# Altium schematic symbol library UCP.SchLib: 378 symbols (part 4 of 14)
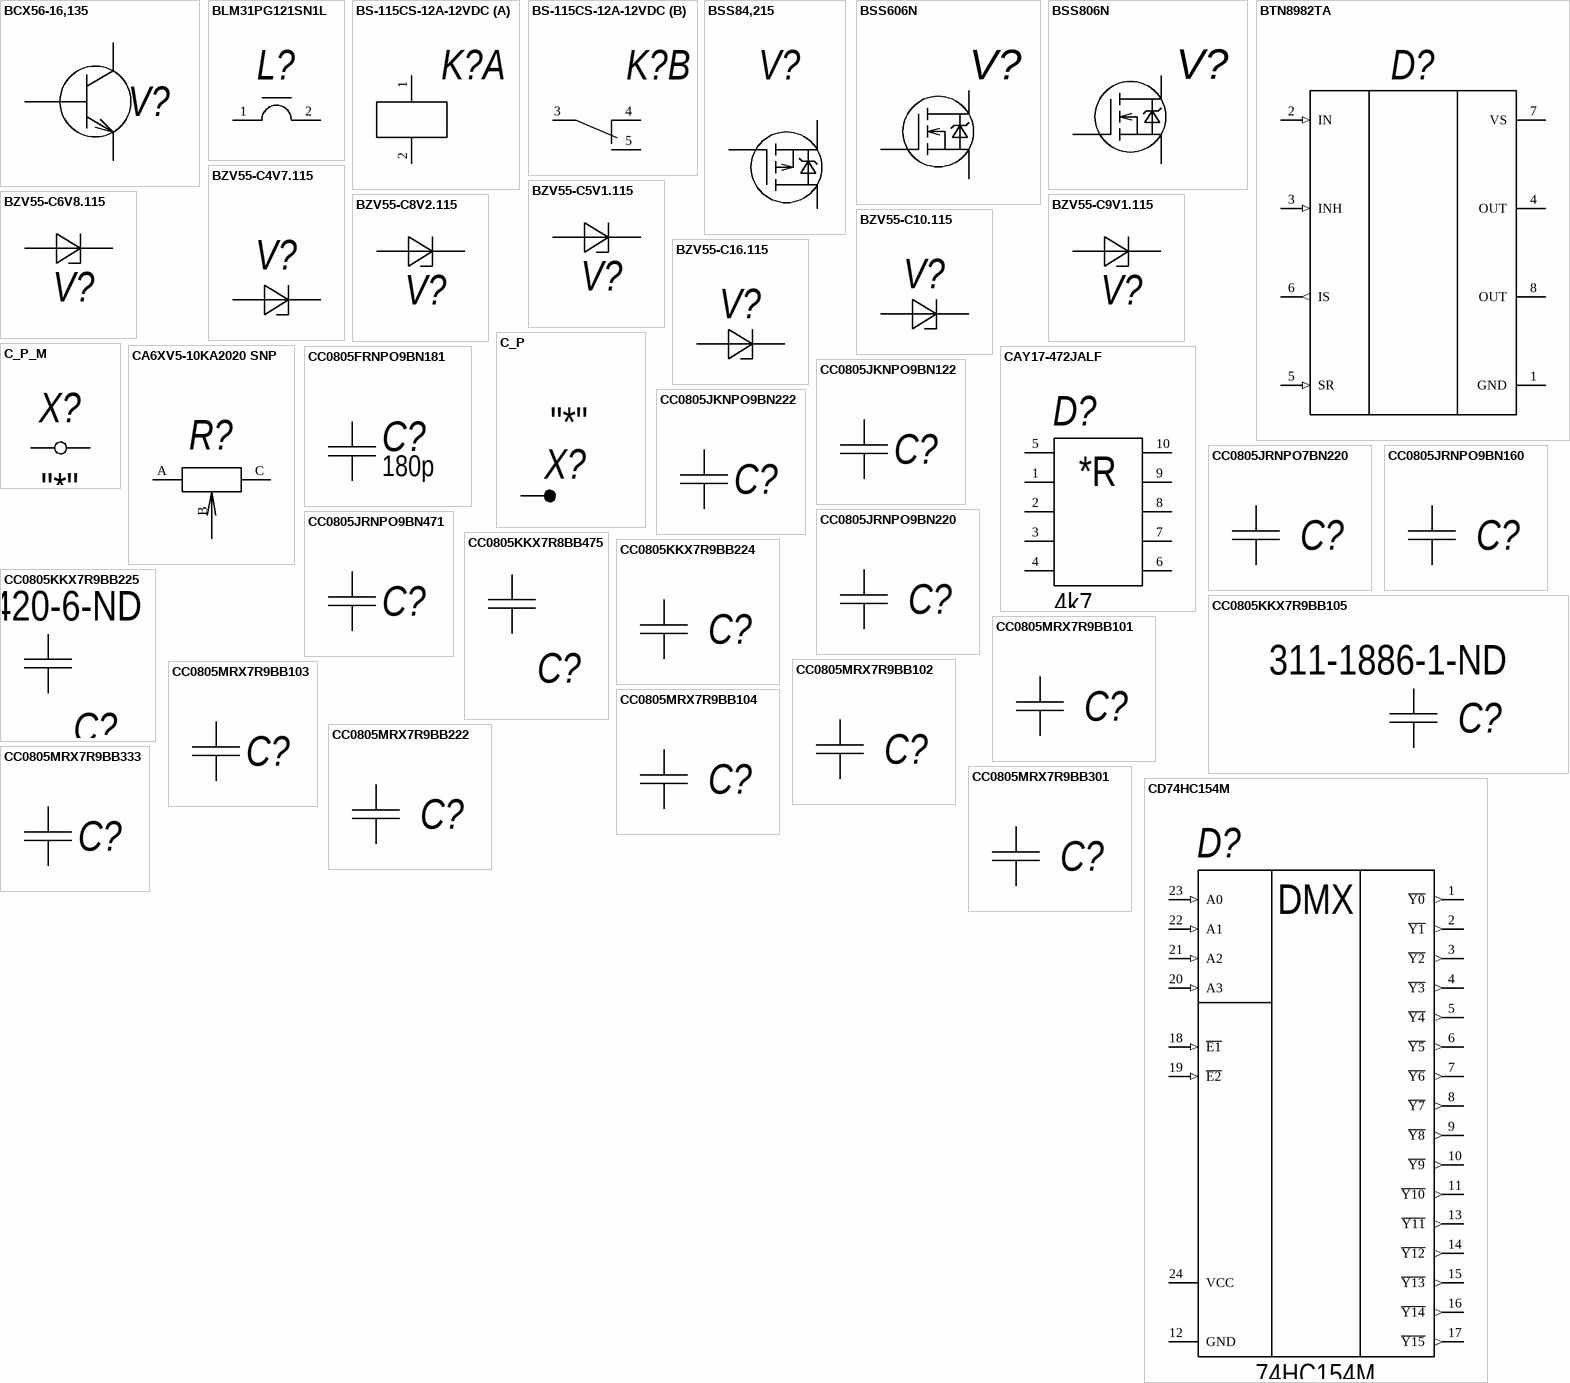
[diagram p27: symbols BCX56-16,135 to CD74HC154M]

## CC0805MRX7R9BB102
designator C?  (value not drawn)
Ceramic capacitor 0805 X7R 1nF 50V; Tolerance: 20%; Value: 1n; Type: Конденсатор; Supplier 1: Digi-Key; Supplier Part Number 1: 311-4349-1-ND; Supplier 2: Mouser; Manufacturer 2: Yageo; Manufacturer Part Number 2: CC0805MRX7R9BB102; RoHS: Yes; Category: Ceramic Capacitors; Stock 2: 5617; Pricing 2: 1=0,14000, 10=0,08800, 50=0,08800, 100=0,03900, 1000=0,02500, 10000=0,02100 (USD); Mount: SMT; Case/Package: 0805; Min Operating Temperature: -55°C; Max Operating Temperature: 125°C; Packaging: Tape and Reel; Capacitance: 1nF; Voltage Rating (DC): 50V; Dielectric: X7R; Resistor Type: Ceramic; Voltage Rating: 50V; Series: CC; Length: 0.079inch; Width: 0.049inch; Thickness: 0.028inch; Depth: 1.25mm; Lead Free: Lead Free; Halogen Free: Halogen Free; RoHS Compliant: Yes; ComponentLink1URL: http://www.mouser.com/ds/2/447/Yageo_UPY-GP_NP0_16V-to-50V_9-358835.pdf?src-supplier=Mouser; ComponentLink1Description: http://www.mouser.com/ds/2/447/Yageo_UPY-GP_NP0_16V-to-50V_9-358835.pdf?src-supplier=Mouser; ComponentLink2URL: http://components.arrow.com/part/dataview/0323_04166629?src-supplier=Arrow+Europe; ComponentLink2Description: http://components.arrow.com/part/dataview/0323_04166629?src-supplier=Arrow+Europe; ComponentLink3URL: http://www.yageo.com/documents/recent/UPY-GPHC_X7R_6.3V-to-50V_18.pdf?src-supplier=Digi-Key; ComponentLink3Description: http://www.yageo.com/documents/recent/UPY-GPHC_X7R_6.3V-to-50V_18.pdf?src-supplier=Digi-Key; Case Code (Imperial): 0805; Case Code (Metric): 2012; Voltage: 50V; Supplier Part Number 2: 603-CC805MRX7R9BB102
footprint CAPC200X125X95L50N (Capacitor, Chip; 2.00 mm L X 1.25 mm W X 0.95 mm H body)
pins: 1, 2

## CC0805MRX7R9BB103
designator C?  (value not drawn)
Ceramic capacitor 0805 X7R 10nF 50V; Manufacturer 1: Yageo; Tolerance: 20%; Description 2: Surface Mount Ceramic Multilayer Capacitor 0.033uF 20% X7R 50V 0805 Paper T/R; Value: 10n; Type: Конденсатор; Supplier 1: Digi-Key; Manufacturer Part Number 1: CC0805MRX7R9BB103; RoHS: Yes; Category: Ceramic Capacitors; Stock 1: 8655; Pricing 1: 1=0,10000, 10=0,07000, 50=0,03800, 100=0,03100, 500=0,02214, 1000=0,01739 (USD); Mount: SMT; Case/Package: 0805; Case Code (Imperial): 0805; Case Code (Metric): 2012; Weight: 0.000194oz; Min Operating Temperature: -55°C; Max Operating Temperature: 125°C; Voltage Rating: 50V; Packaging: Tape and Reel; Capacitance: 10nF; Voltage Rating (DC): 50V; Dielectric: X7R; Termination: SMD/SMT; Resistor Type: Ceramic; Series: CC; Length: 0.079inch; Width: 0.049inch; Thickness: 0.028inch; Depth: 1.25mm; Lead Free: Lead Free; Halogen Free: Halogen Free; RoHS Compliant: Yes; ComponentLink1URL: https://datasheet.ciiva.com/13264/upy-gphc-x7r-6-3v-to-50v-8-12304-13264316.pdf?src-supplier=Mouser; ComponentLink1Description: https://datasheet.ciiva.com/13264/upy-gphc-x7r-6-3v-to-50v-8-12304-13264316.pdf?src-supplier=Mouser; Supplier Part Number 1: 311-4350-1-ND; Supplier 2: Digi-Key; Supplier Part Number 2: 13-CC0805MRX7R9BB333TR-ND; Manufacturer 2: Yageo; Manufacturer Part Number 2: CC0805MRX7R9BB333; Pricing 2: 20000=0,02109 (USD); Voltage: 50V
footprint CAPC200X125X95L50N (Capacitor, Chip; 2.00 mm L X 1.25 mm W X 0.95 mm H body)
pins: 1, 2

## CC0805MRX7R9BB104
designator C?  (value not drawn)
Ceramic capacitor 0805 X7R 0.1µF 50V; Manufacturer 1: Yageo; Tolerance: 20%; Capacitance: 100nF; Value: 0.1u; Type: Конденсатор; Supplier 1: Digi-Key; Supplier Part Number 1: 311-4351-1-ND; Manufacturer Part Number 1: CC0805MRX7R9BB104; RoHS: Yes; Category: Ceramic Capacitors; Stock 1: 29978; Pricing 1: 1=0,15000, 10=0,10700, 50=0,06080, 100=0,05040, 500=0,03536, 1000=0,02927 (USD); Mount: SMT; Case/Package: 0805; Min Operating Temperature: -55°C; Max Operating Temperature: 125°C; Packaging: Tape and Reel; Dielectric: X7R; Voltage Rating: 50V; Voltage Rating (DC): 50V; Series: CC; Length: 0.079inch; Width: 0.049inch; Thickness: 0.037inch; Depth: 1.25mm; Lead Free: Lead Free; Halogen Free: Halogen Free; RoHS Compliant: Yes; ComponentLink1URL: https://datasheet.ciiva.com/13207/upy-gphc-x7r-6-3v-to-50v-8-12304-13207535.pdf?src-supplier=Mouser; ComponentLink1Description: https://datasheet.ciiva.com/13207/upy-gphc-x7r-6-3v-to-50v-8-12304-13207535.pdf?src-supplier=Mouser; Case Code (Imperial): 0805; Case Code (Metric): 2012; Voltage: 50V
footprint CAPC200X125X95L50N (Capacitor, Chip; 2.00 mm L X 1.25 mm W X 0.95 mm H body)
pins: 1, 2

## CC0805MRX7R9BB222
designator C?  (value not drawn)
0805 2.2 nF 50 V ±20 % Tolerance X7R SMT Multilayer Ceramic Capacitor; Capacitance: 1nF; Tolerance: 20%; Voltage Rating (DC): 50V; Value: 2.2n; Type: Конденсатор; Supplier 1: Digi-Key; Supplier Part Number 1: 311-4349-1-ND; Supplier 2: Mouser; Manufacturer 2: Yageo; Manufacturer Part Number 2: CC0805MRX7R9BB102; RoHS: Yes; Category: Ceramic Capacitors; Stock 2: 5617; Pricing 2: 1=0,14000, 10=0,08800, 50=0,08800, 100=0,03900, 1000=0,02500, 10000=0,02100 (USD); Mount: SMT; Case/Package: 0805; Min Operating Temperature: -55°C; Max Operating Temperature: 125°C; Packaging: Tape and Reel; Dielectric: X7R; Resistor Type: Ceramic; Voltage Rating: 50V; Series: CC; Length: 0.079inch; Width: 0.049inch; Thickness: 0.028inch; Depth: 1.25mm; Lead Free: Lead Free; Halogen Free: Halogen Free; RoHS Compliant: Yes; ComponentLink1URL: http://www.mouser.com/ds/2/447/Yageo_UPY-GP_NP0_16V-to-50V_9-358835.pdf?src-supplier=Mouser; ComponentLink1Description: http://www.mouser.com/ds/2/447/Yageo_UPY-GP_NP0_16V-to-50V_9-358835.pdf?src-supplier=Mouser; ComponentLink2URL: http://components.arrow.com/part/dataview/0323_04166629?src-supplier=Arrow+Europe; ComponentLink2Description: http://components.arrow.com/part/dataview/0323_04166629?src-supplier=Arrow+Europe; ComponentLink3URL: http://www.yageo.com/documents/recent/UPY-GPHC_X7R_6.3V-to-50V_18.pdf?src-supplier=Digi-Key; ComponentLink3Description: http://www.yageo.com/documents/recent/UPY-GPHC_X7R_6.3V-to-50V_18.pdf?src-supplier=Digi-Key; Case Code (Imperial): 0805; Case Code (Metric): 2012; Voltage: 50V; Supplier Part Number 2: 603-CC805MRX7R9BB102; Supplier 3: Avnet; Supplier Part Number 3: CC0805MRX7R9BB222; Manufacturer 3: Yageo; Manufacturer Part Number 3: CC0805MRX7R9BB222; RoHS 3: Yes; Pricing 3: 16000=0,00882 (USD)
footprint CAPC200X125X95L50N (Capacitor, Chip; 2.00 mm L X 1.25 mm W X 0.95 mm H body)
pins: 1, 2

## CC0805MRX7R9BB301
designator C?  (value not drawn)
Ceramic capacitor 0805 X7R 300pF 50V; Manufacturer 1: KEMET; Manufacturer Part Number 1: C0805C301J5GACTU; Capacitance: 1nF; Tolerance: 20%; Value: 300p; Type: Конденсатор; Dielectric: C0G; Dissipation Factor: 0.5%; Mount: SMT; Case/Package: 0805; Voltage Rating: 50V; Voltage: 50V; Supplier 1: Farnell; Supplier Part Number 1: 2819781; RoHS 1: Yes; Category: Ceramic Capacitors; Stock 1: 4548; Pricing 1: 10=0,152, 100=0,127, 500=0,0896, 1000=0,077, 2000=0,0727 (EUR); Case Code (Imperial): 0805; Case Code (Metric): 2012; Dielectric Material: Ceramic; Min Operating Temperature: -55°C; Max Operating Temperature: 125°C; Voltage Rating (DC): 50V; Packaging: Tape and Reel; Package Quantity: 1; Termination: SMD/SMT; Series: C; Length: 2mm; Width: 0.049inch; Height: 0.78mm; Depth: 1.25mm; Thickness: 0.035inch; Lead Pitch: 0.75mm; RoHS Compliant: Yes; Lead Free: Lead Free; Reach SVHC Compliant: No; ComponentLink1URL: http://www.mouser.com/ds/2/212/KEM_C1003_C0G_SMD-1101588.pdf?src-supplier=Mouser; ComponentLink1Description: http://www.mouser.com/ds/2/212/KEM_C1003_C0G_SMD-1101588.pdf?src-supplier=Mouser; ComponentLink2URL: http://components.arrow.com/part/dataview/2091991S5917792N7429?src-supplier=Arrow+Electronics; ComponentLink2Description: http://components.arrow.com/part/dataview/2091991S5917792N7429?src-supplier=Arrow+Electronics; ComponentLink3URL: https://search.kemet.com/component-edge/download/datasheet/C0805C301J5GACTU.pdf?src-supplier=Digi-Key; ComponentLink3Description: https://search.kemet.com/component-edge/download/datasheet/C0805C301J5GACTU.pdf?src-supplier=Digi-Key; ComponentLink4URL: https://api.kemet.com/component-edge/download/datasheet/C0805C301J5GACTU.pdf?src-supplier=Digi-Key; ComponentLink4Description: https://api.kemet.com/component-edge/download/datasheet/C0805C301J5GACTU.pdf?src-supplier=Digi-Key
footprint CAPC200X125X95L50N (Capacitor, Chip; 2.00 mm L X 1.25 mm W X 0.95 mm H body)
pins: 1, 2

## CC0805MRX7R9BB333
designator C?  (value not drawn)
Ceramic capacitor 0805 X7R 33nF 50V; Manufacturer 1: Yageo; Description 1: Surface Mount Ceramic Multilayer Capacitor 0.033uF 20% X7R 50V 0805 Paper T/R; Value: 33n; Type: Конденсатор; ComponentLink1URL: https://datasheet.ciiva.com/13264/upy-gphc-x7r-6-3v-to-50v-8-12304-13264316.pdf?src-supplier=Mouser; ComponentLink1Description: https://datasheet.ciiva.com/13264/upy-gphc-x7r-6-3v-to-50v-8-12304-13264316.pdf?src-supplier=Mouser; Supplier 1: Digi-Key; Supplier Part Number 1: 13-CC0805MRX7R9BB333TR-ND; Manufacturer Part Number 1: CC0805MRX7R9BB333; RoHS: Yes; Category: Ceramic Capacitors; Pricing 1: 20000=0,02109 (USD); RoHS Compliant: Yes; Capacitance: 33nF; Case/Package: 0805; Case Code (Imperial): 0805; Case Code (Metric): 2012; Dielectric: X7R; Voltage Rating (DC): 50V; Voltage Rating: 50V; Voltage: 50V; Mount: SMT
footprint CAPC200X125X95L50N (Capacitor, Chip; 2.00 mm L X 1.25 mm W X 0.95 mm H body)
pins: 1, 2

## CD74HC154M
designator D?  value 74HC154M  (hidden comment: CD74HC154M)
High-Speed CMOS Logic 4- to 16-Line Decoder/Demultiplexer; Type: Микросхема; Case/Package: SOIC-16; Mount: SMT; ComponentLink1URL: https://datasheet.ciiva.com/22696/1831198-22696812.pdf?src-supplier=Element14; ComponentLink1Description: https://datasheet.ciiva.com/22696/1831198-22696812.pdf?src-supplier=Element14; ComponentLink2URL: https://datasheet.ciiva.com/34301/916385-34301758.pdf?src-supplier=Jameco; ComponentLink2Description: https://datasheet.ciiva.com/34301/916385-34301758.pdf?src-supplier=Jameco; ComponentLink3URL: https://datasheet.ciiva.com/15093/getdatasheetpartid-134875-15093436.pdf?src-supplier=Verical; ComponentLink3Description: https://datasheet.ciiva.com/15093/getdatasheetpartid-134875-15093436.pdf?src-supplier=Verical; ComponentLink4URL: https://datasheet.ciiva.com/1509/1831198-1509483.pdf?src-supplier=Element14; ComponentLink4Description: https://datasheet.ciiva.com/1509/1831198-1509483.pdf?src-supplier=Element14; ComponentLink5URL: https://datasheet.ciiva.com/46381/1886142-46381835.pdf?src-supplier=Element14; ComponentLink5Description: https://datasheet.ciiva.com/46381/1886142-46381835.pdf?src-supplier=Element14; ComponentLink6URL: https://datasheet.ciiva.com/46435/1831198-46435871.pdf?src-supplier=Element14; ComponentLink6Description: https://datasheet.ciiva.com/46435/1831198-46435871.pdf?src-supplier=Element14; ComponentLink7URL: https://datasheet.ciiva.com/1886/sn74hc595-1886280.pdf?src-supplier=Digi-Key; ComponentLink7Description: https://datasheet.ciiva.com/1886/sn74hc595-1886280.pdf?src-supplier=Digi-Key; ComponentLink8URL: https://datasheet.ciiva.com/1886/sn74hc595-1886279.pdf?src-supplier=Digi-Key; ComponentLink8Description: https://datasheet.ciiva.com/1886/sn74hc595-1886279.pdf?src-supplier=Digi-Key; ComponentLink9URL: https://datasheet.ciiva.com/1886/sn74hc595-1886281.pdf?src-supplier=Digi-Key; ComponentLink9Description: https://datasheet.ciiva.com/1886/sn74hc595-1886281.pdf?src-supplier=Digi-Key; ComponentLink10URL: https://datasheet.ciiva.com/14294/sn74hc595-14294991.pdf?src-supplier=Avnet; ComponentLink10Description: https://datasheet.ciiva.com/14294/sn74hc595-14294991.pdf?src-supplier=Avnet; ComponentLink11URL: https://datasheet.ciiva.com/14294/sn74hc595-14294989.pdf?src-supplier=Avnet; ComponentLink11Description: https://datasheet.ciiva.com/14294/sn74hc595-14294989.pdf?src-supplier=Avnet; Supplier 1: Heisener; Supplier Part Number 1: CD74HC154M
footprint SOIC24P127_1540X1032X265L75X42 (SOIC, 24-Leads, Body 15,40x7,50mm, Pitch 1,27mm, IPC Medium Density)
pins: 1 ~{Y0} (out) "GND", 2 ~{Y1} (out) "GND", 3 ~{Y2} (out) "GND", 4 ~{Y3} (out) "GND", 5 ~{Y4} (out) "GND", 6 ~{Y5} (out) "GND", 7 ~{Y6} (out) "GND", 8 ~{Y7} (out) "GND", 9 ~{Y8} (out) "GND", 10 ~{Y9} (out) "GND", 11 ~{Y10} (out) "GND", 12 GND (power), 13 ~{Y11} (out) "GND", 14 ~{Y12} (out) "GND", 15 ~{Y13} (out) "GND", 16 ~{Y14} (out) "GND", 17 ~{Y15} (out) "GND", 18 ~{E1} (in) "GND", 19 ~{E2} (in) "GND", 20 A3 (in) "GND", 21 A2 (in) "GND", 22 A1 (in) "GND", 23 A0 (in) "GND", 24 VCC (power) "Vcc"
1 alternate drawing of the same symbol
text: DMX

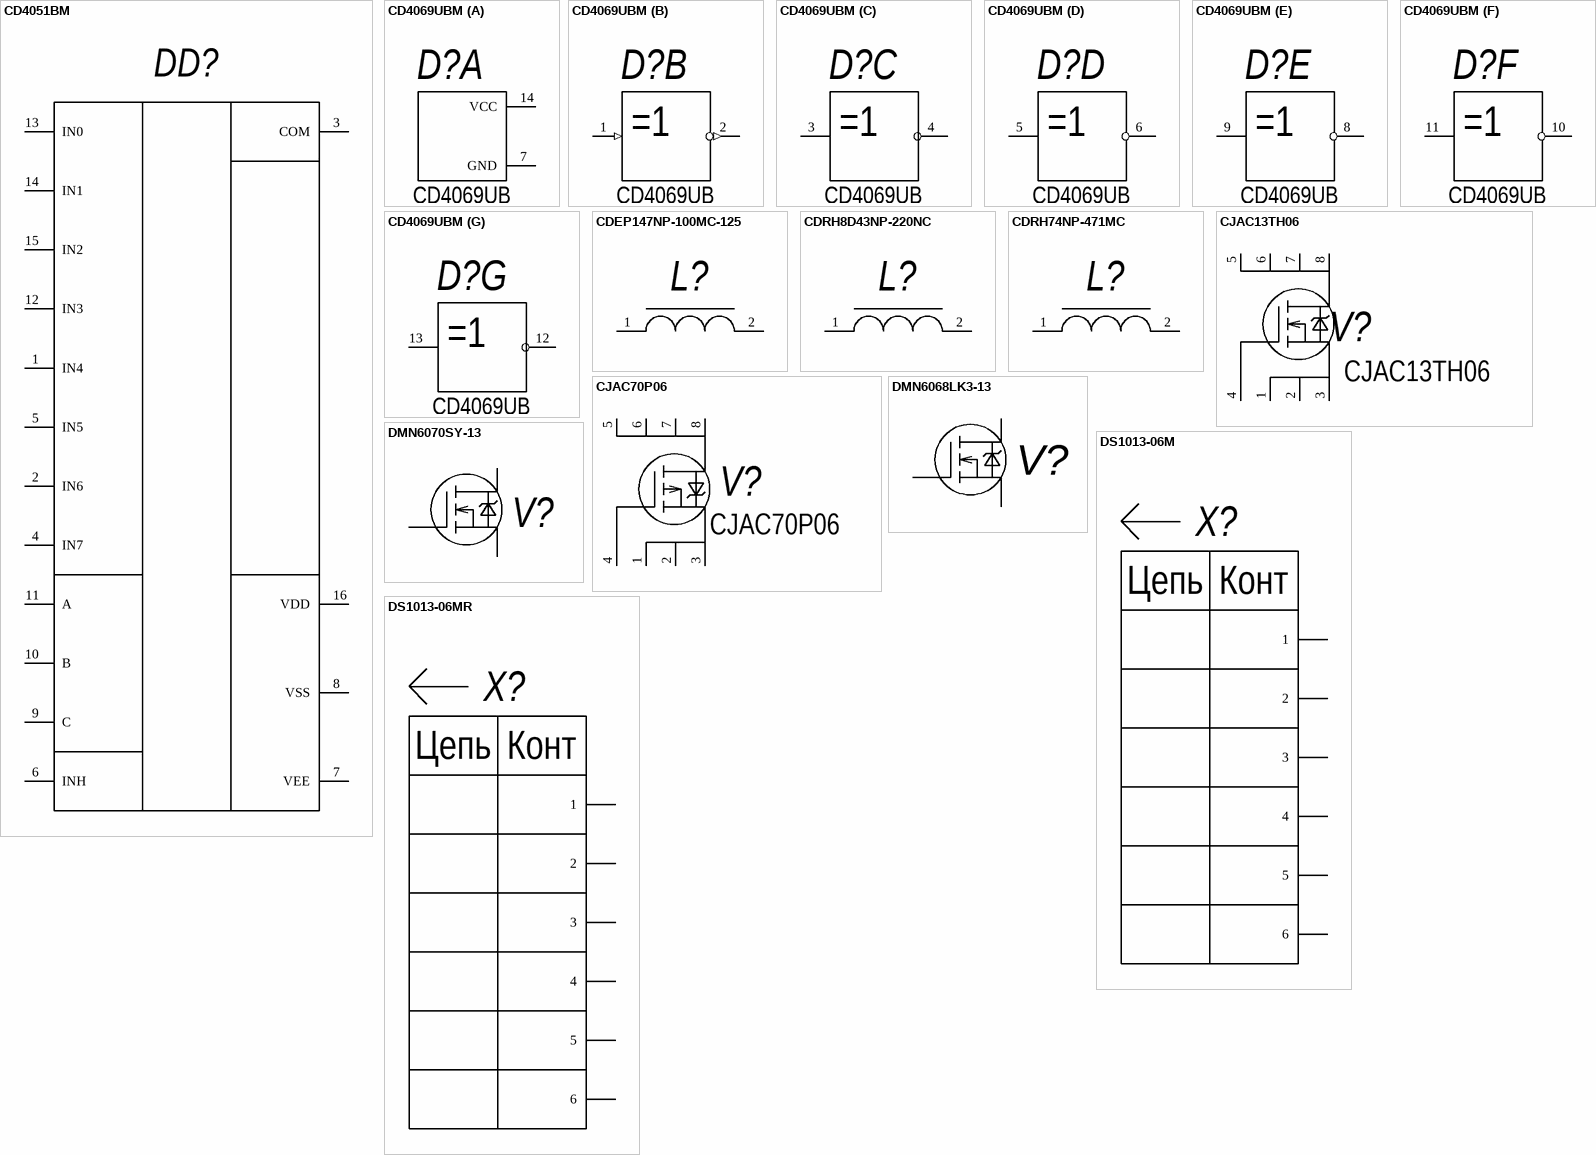
[diagram p7: symbols CD4051BM to DS1013-06MR]

## CD4051BM
designator DD?, comment CD4051BM96  (value not drawn)
CMOS Single 8-Channel Analog Multiplexer/Demultiplexer / With Logic-Level Conversion; Value: 4051; Supplier 1: Arrow Electronics; Supplier Part Number 1: CD4051BM96; Case/Package: SOIC-16; Mount: SMT; Type: Микросхема
footprint SOIC16P127_990X600X175L83X42N (Small Outline IC (SOIC), 1.27 mm pitch; 16 pin, 9.90 mm L X 3.90 mm W X 1.75 mm H body)
pins: 1 IN4, 2 IN6, 3 COM, 4 IN7, 5 IN5, 6 INH, 7 VEE (power), 8 VSS (power), 9 C, 10 B, 11 A, 12 IN3, 13 IN0, 14 IN1, 15 IN2, 16 VDD (power)

## CD4069UBM
designator D?  value CD4069UB  (hidden comment: CD4069UBM)
IC HEX INVERTER 14SOIC; Manufacturer 1: Texas Instruments; Manufacturer Part Number 1: CD4069UBM96; Type: Микросхема; Number of Inputs: 1; Propagation Delay: 110ns; Logic Function: Buffer,Inverter; Number of Elements: 6; Max Supply Voltage: 18V; Min Supply Voltage: 3V; Output Current: 6.8A; Quiescent Current: 5uA; High Level Output Current: -4.2mA; Low Level Output Current: 4.2mA; Operating Supply Voltage: 15V; Case/Package: SOIC-14; Mount: SMT; Max Operating Temperature: 125°C; ComponentLink1URL: https://datasheet.ciiva.com/15089/getdatasheetpartid-92506-15089215.pdf?src-supplier=Verical; ComponentLink1Description: https://datasheet.ciiva.com/15089/getdatasheetpartid-92506-15089215.pdf?src-supplier=Verical; ComponentLink2URL: https://datasheet.ciiva.com/41677/1845236-41677277.pdf?src-supplier=Newark; ComponentLink2Description: https://datasheet.ciiva.com/41677/1845236-41677277.pdf?src-supplier=Newark; ComponentLink3URL: https://datasheet.ciiva.com/1872/cd4069ub-1872740.pdf?src-supplier=Digi-Key; ComponentLink3Description: https://datasheet.ciiva.com/1872/cd4069ub-1872740.pdf?src-supplier=Digi-Key; ComponentLink4URL: https://datasheet.ciiva.com/1872/cd4069ub-1872739.pdf?src-supplier=Digi-Key; ComponentLink4Description: https://datasheet.ciiva.com/1872/cd4069ub-1872739.pdf?src-supplier=Digi-Key; ComponentLink5URL: https://datasheet.ciiva.com/1872/cd4069ub-1872741.pdf?src-supplier=Digi-Key; ComponentLink5Description: https://datasheet.ciiva.com/1872/cd4069ub-1872741.pdf?src-supplier=Digi-Key; Supplier 1: Farnell; Supplier Part Number 1: 3120133; RoHS 1: Yes; Category: Logic Gates; Pricing 1: 5=0,53000, 10=0,45400, 100=0,31500, 500=0,26600, 1000=0,18700 (EUR); Number of Pins: 14; Weight: 0.004564oz; Contact Plating: Gold; Min Operating Temperature: -55°C; Package Quantity: 1; Packaging: Tape and Reel; Number of Circuits: 6; Turn-On Delay Time: 110ns; Series: 4000B; Technology: CMOS; Number of Bits: 6; Number of Gates: 6; Radiation Hardening: No; Lead Free: Lead Free; RoHS Compliant: Yes; Reach SVHC Compliant: Yes
footprint SOIC14P127_865X600X175L83X42N (Small Outline IC (SOIC), 1.27 mm pitch; 14 pin, 8.65 mm L X 3.90 mm W X 1.75 mm H body)
footprint SOIC14P127_865X600X175L65X42N (Small Outline IC (SOIC), 1.27 mm pitch; 14 pin, 8.65 mm L X 3.90 mm W X 1.75 mm H body)
part A pins: 7 GND (power) "Ground (0 V)", 14 VCC (power) "Supply Voltage"
part B pins: 1 1A (in) "Data Input", 2 1B (out) "Data Output"
part C pins: 3 1Y "Data Output", 4 2A "Data Input"
part D pins: 5 2B "Data Input", 6 2Y "Data Output"
part E pins: 8 3Y "Data Output", 9 3A "Data Input"
part F pins: 10 3B "Data Input", 11 4Y "Data Output"
part G pins: 12 4A "Data Input", 13 4B "Data Input"

## CDEP147NP-100MC-125
designator L?  (value not drawn)
SMD Power Inductor 10uH ±20% 10A 13.31mOhm; Type: Катушка индуктивности; Value: CDRH74; Case/Package: SMD-2; Mount: SMT; Supplier 1: Avnet; Supplier Part Number 1: CDEP147NP-100MC-125
footprint SUMIDA_CDEP147
pins: 1 "Назначение вывода", 2 "Назначение вывода"

## CDRH8D43NP-220NC
designator L?  (value not drawn)
Shielded High Power Inductors / 100 uH, 1,5 A; Manufacturer 1: Sumida; Type: Катушка индуктивности; Value: CDRH8D43-220; Core Material: Ferrite; Current Rating: 1.8A; Saturation Current: 2.6A; Tolerance: 30%; Inductance: 22uH; DC Resistance (DCR): 75mR; Test Frequency: 100kHz; Case/Package: SMD-2; Mount: SMT; Supplier 1: Avnet; Supplier Part Number 1: CDRH8D43NP-220NC; Manufacturer Part Number 1: CDRH8D43NP-220NC; RoHS 1: Yes; Category: Fixed Inductors; Pricing 1: 500=0,52514, 1000=0,51491, 2000=0,50468, 3000=0,49445, 4000=0,48422, 5000=0,46376, 50000=0,37356 (USD); Weight: 0.031747oz; Min Operating Temperature: -40°C; Max Operating Temperature: 100°C; Package Quantity: 500; Shielding: Shielded; Packaging: Tape and Reel; Max DC Current: 1.8A; Termination: SMD/SMT; Series: CDRH8D43; Length: 0.315inch; Width: 0.315inch; Height: 4.5mm; Height - Seated (Max): 0.177inch; Depth: 8.3mm; Radiation Hardening: No; RoHS Compliant: Yes; ComponentLink1URL: http://products.sumida.com/products/pdf/CDRH8D43.pdf?src-supplier=Digi-Key; ComponentLink1Description: http://products.sumida.com/products/pdf/CDRH8D43.pdf?src-supplier=Digi-Key; ComponentLink2URL: http://www.sumida.com/products/pdf/CDRH8D43.pdf?src-supplier=Avnet; ComponentLink2Description: http://www.sumida.com/products/pdf/CDRH8D43.pdf?src-supplier=Avnet; ComponentLink3URL: http://www.sumida.com/en/products/search_advanced_pi_list.php?txtPartNo=CDRH103RNP&amp;ProdType=CDRH103RNP&src-supplier=Mouser; ComponentLink3Description: http://www.sumida.com/en/products/search_advanced_pi_list.php?txtPartNo=CDRH103RNP&amp;ProdType=CDRH103RNP&src-supplier=Mouser
footprint SUMIDA_CDRH8D43
pins: 1 "Назначение вывода", 2 "Назначение вывода"

## CDRH74NP-471MC
designator L?  (value not drawn)
Shielded Inductors 470 uH, 260 mA, 3.01 Ohm; Type: Катушка индуктивности; Value: CDRH74; Case/Package: SMD-2; Mount: SMT; Supplier 1: Avnet; Supplier Part Number 1: CDRH74NP-471MC-B
footprint INDM730X730X450L90X180N (Inductor, Molded Body; 7.30 mm L X 7.30 mm W X 4.50 mm H body)
pins: 1 "Назначение вывода", 2 "Назначение вывода"

## CJAC13TH06
designator V?
N-Channel Power MOSFET,  60V, 2.2 mOhm, Surface Mount Enhancement Mode Mosfet - PDFNWB5×6-8L; Case/Package: PDFN5x6; Mount: SMT; Type: Транзистор; Value: CJAC13TH06
footprint JSCS_PDFNWB5x6-8L
pins: 1 S, 2 S, 3 S, 4 G, 5 D, 6 D, 7 D, 8 D

## CJAC70P06
designator V?
P-Channel Power MOSFET,  60V, 7.6 mOhm, Surface Mount Enhancement Mode Mosfet - PDFNWB5×6-8L; Case/Package: PDFN5x6; Mount: SMT; Type: Транзистор; Value: CJAC70P06
footprint JSCS_PDFNWB5x6-8L
pins: 1 S, 2 S, 3 S, 4 G, 5 D, 6 D, 7 D, 8 D

## DMN6068LK3-13
designator V?  (value not drawn)
N-Channel 60 V 68 mOhm Surface Mount Enhancement Mode Mosfet - TO252-3L; Manufacturer 1: Diodes Zetex; Rds On Max: 68mR; Input Capacitance: 502pF; Rise Time: 10.8ns; Max Power Dissipation: 2.12W; Drain to Source Voltage (Vdss): 60V; Continuous Drain Current (ID): 8.5A; Fall Time: 8.7ns; Turn-Off Delay Time: 11.9ns; Turn-On Delay Time: 3.6ns; Element Configuration: Single; Gate to Source Voltage (Vgs): 20V; Number of Elements: 1; Supplier 1: RSComponents; Manufacturer Part Number 1: DMN6068LK3-13; RoHS: Yes; Category: MOSFETs; Stock 1: 1; Pricing 1: 25=0,58100, 125=0,33000, 625=0,29400, 1250=0,25500 (USD); Mount: SMT; Case/Package: TO-252-3; Number of Pins: 3; Weight: 0.139332oz; Min Operating Temperature: -55°C; Max Operating Temperature: 150°C; Package Quantity: 2500; Packaging: Tape and Reel; Drain to Source Resistance: 68mR; Drain to Source Breakdown Voltage: 60V; Number of Channels: 1; Length: 6.73mm; Width: 6.22mm; Height: 2.39mm; Lead Free: Lead Free; REACH SVHC: No SVHC; ComponentLink1URL: https://datasheet.ciiva.com/6383/dmn6068lk3-6383152.pdf?src-supplier=Digi-Key; ComponentLink1Description: https://datasheet.ciiva.com/6383/dmn6068lk3-6383152.pdf?src-supplier=Digi-Key; ComponentLink2URL: https://datasheet.ciiva.com/4443/dmn6068lk3-60087-4443203.pdf?src-supplier=Mouser; ComponentLink2Description: https://datasheet.ciiva.com/4443/dmn6068lk3-60087-4443203.pdf?src-supplier=Mouser; ComponentLink3URL: https://datasheet.ciiva.com/8115/dmn6068lk3-8115608.pdf?src-supplier=Avnet; ComponentLink3Description: https://datasheet.ciiva.com/8115/dmn6068lk3-8115608.pdf?src-supplier=Avnet; ComponentLink4URL: https://datasheet.ciiva.com/6383/dmn6068lk3-6383149.pdf?src-supplier=Digi-Key; ComponentLink4Description: https://datasheet.ciiva.com/6383/dmn6068lk3-6383149.pdf?src-supplier=Digi-Key; Supplier Part Number 1: 7514200P; Type: Транзистор; Value: DMN6068
footprint DPAK4P229_990X238L159X76T520X546N (DPAK, 2.29 mm pitch; 2 pin, 6.095 mm L X 6.54 mm W X 2.38 mm H body)
pins: 1 G, 3 S, 4 D

## DMN6070SY-13
designator V?  (value not drawn)
N-Channel 60 V 85 mOhm 4.1A Surface Mount; Drain to Source Voltage (Vdss): 60V; Rds On Max: 85mR; Input Capacitance: 588pF; Max Power Dissipation: 2.1W; Supplier 1: Mouser; Supplier Part Number 1: 621-DMN6070SY-13; Supplier 2: Digi-Key; Manufacturer 2: Diodes; Manufacturer Part Number 2: DMN6070SY-13; RoHS: Yes; Category: MOSFETs; Pricing 2: 2500=0,14302 (USD); Mount: SMT; Case/Package: SOT-89; Min Operating Temperature: -55°C; Max Operating Temperature: 150°C; Packaging: Tape and Reel; Continuous Drain Current (ID): 4.1A; RoHS Compliant: Yes; ComponentLink1URL: https://www.diodes.com/assets/Datasheets/DMN6070SY.pdf?src-supplier=Digi-Key; ComponentLink1Description: https://www.diodes.com/assets/Datasheets/DMN6070SY.pdf?src-supplier=Digi-Key; Supplier Part Number 2: DMN6070SY-13-ND; Type: Транзистор; Value: DMN6070
footprint SOT89-150P350X160-3N (SOT89, 3-Leads, Body 4,50x2,50mm, Pitch 1,50mm, Lead Span 3,5mm , IPC Medium Density)
pins: 1 G, 2 D, 3 S

## DS1013-06M
designator X?  (value not drawn)
Case/Package: DIP-6; Mount: THT; Type: Вилка; Value: DS1013-06M
footprint HEADER_2x4
pins: 1, 2, 3, 4, 5, 6
text: Цепь; Конт

## DS1013-06MR
designator X?  (value not drawn)
Case/Package: DIP-6; Mount: THT; Type: Вилка; Value: DS1013-06MR
footprint DS1013-06RSIB-B-0
pins: 1, 2, 3, 4, 5, 6
text: Цепь; Конт

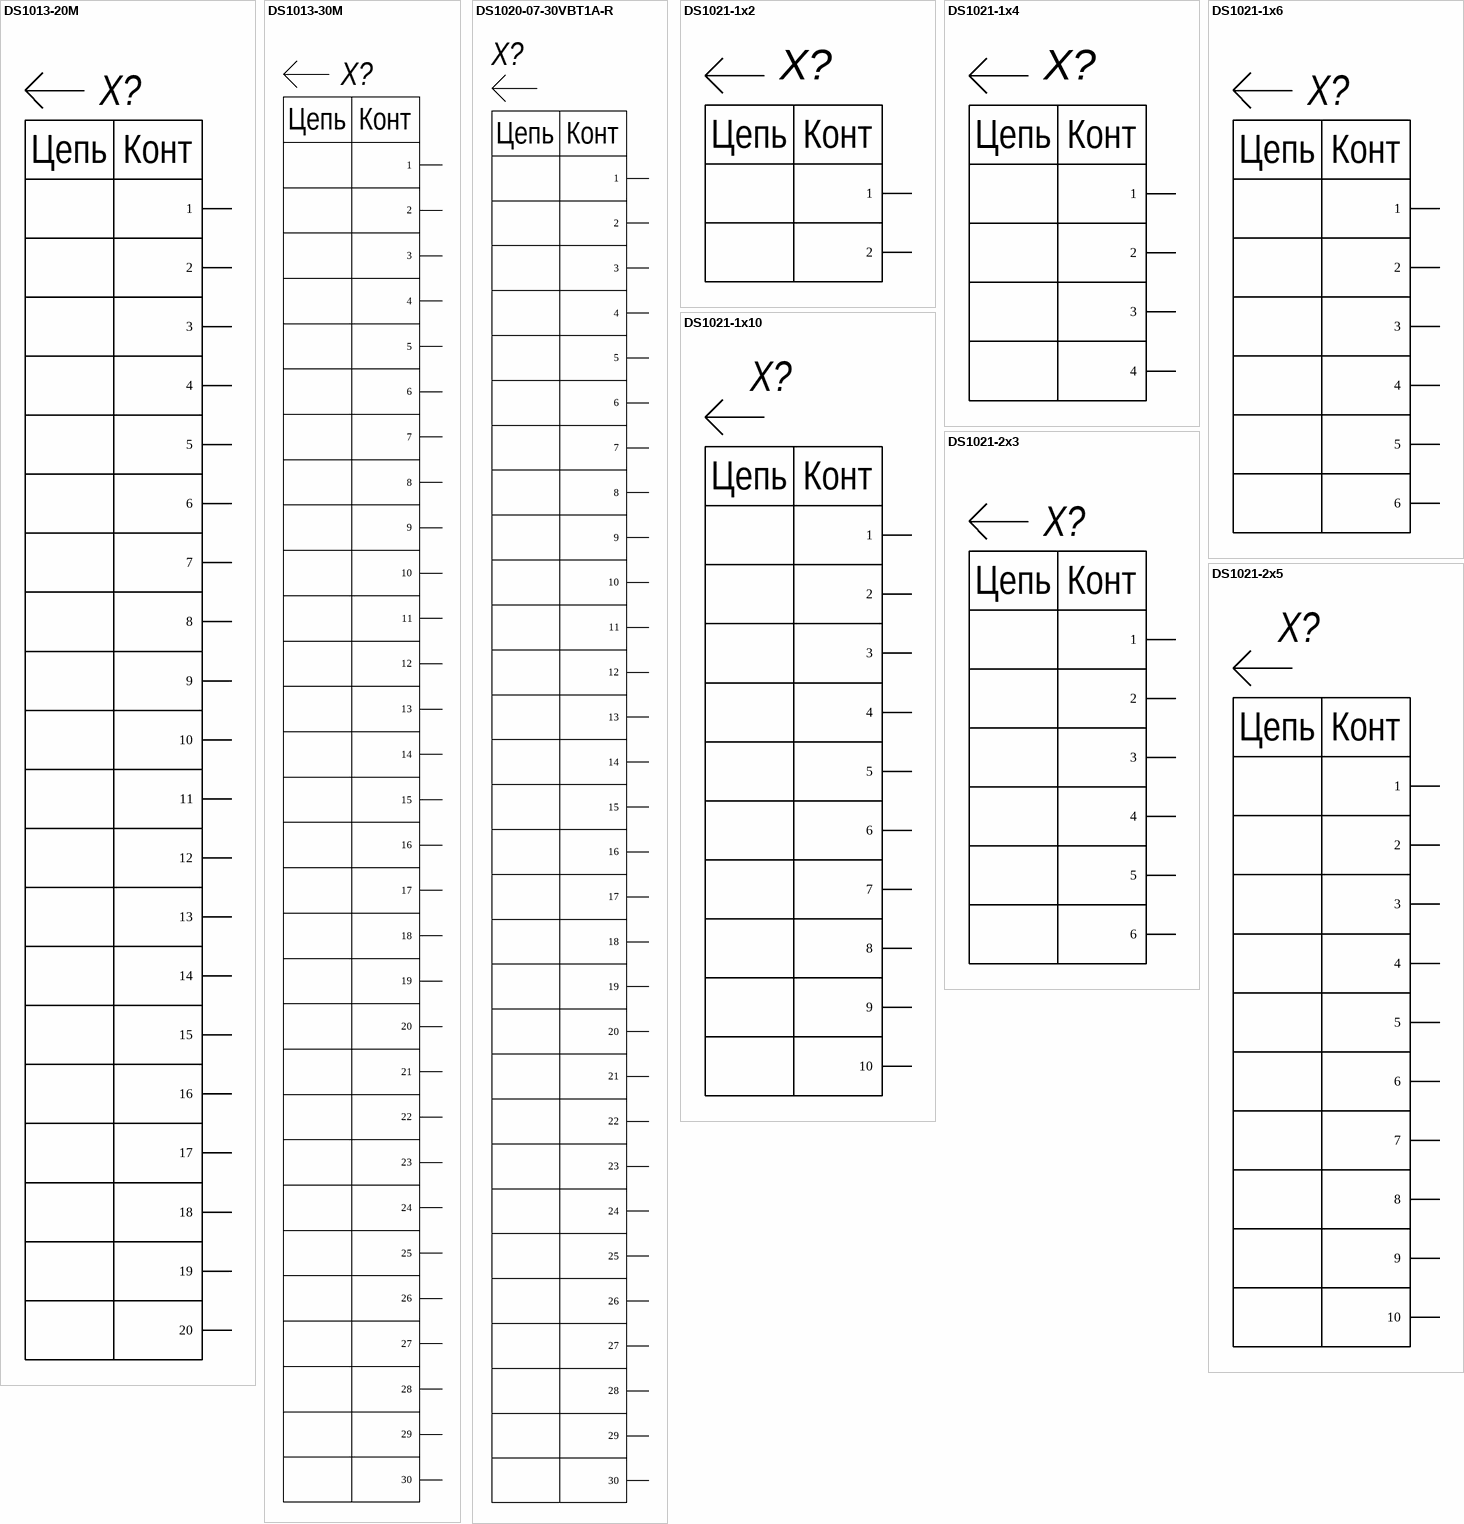
[diagram p8: symbols DS1013-20M to DS1021-2x5]

## DS1013-20M
designator X?  (value not drawn)
Case/Package: DIP-20; Mount: THT; Type: Вилка; Value: DS1013-20M
footprint IDC-20_SMT
pins: 1, 2, 3, 4, 5, 6, 7, 8, 9, 10, 11, 12, 13, 14, 15, 16, 17, 18, 19, 20
text: Цепь; Конт

## DS1013-30M
designator X?  (value not drawn)
Value: DS1013-20M; Case/Package: DIP-30; Mount: THT; Type: Вилка
footprint IDC-30_SMT
pins: 1, 2, 3, 4, 5, 6, 7, 8, 9, 10, 11, 12, 13, 14, 15, 16, 17, 18, 19, 20, 21, 22, 23, 24, 25, 26, 27, 28, 29, 30
text: Цепь; Конт

## DS1020-07-30VBT1A-R
designator X?, comment 522713079  (value not drawn)
Value: DS1020-30; Supplier 1: Digi-Key; Supplier Part Number 1: WM7967CT-ND; Case/Package: SMD-30; Mount: SMT; Type: Розетка
footprint DS1020-07-30VBT1A-R (1.00mm FPC ZIF R/A SMT Type 30 Pin)
pins: 1, 2, 3, 4, 5, 6, 7, 8, 9, 10, 11, 12, 13, 14, 15, 16, 17, 18, 19, 20, 21, 22, 23, 24, 25, 26, 27, 28, 29, 30
text: Цепь; Конт

## DS1021-1x2
designator X?, comment DS1021-1x2SF11  (value not drawn)
2,54 mm pin header single row  1x2; Case/Package: DIP-2; Mount: THT; Type: Вилка; Value: DS1021-1x2
footprint HDRV2W67P254_2x1_508x250H250 (Header, Vertical, 2.54 mm pitch; 0.64 mm lead width, 2 pins, 1 row, 2 pins per row, 5.08 mm L X 2.50 mm W X 8.60 mm H body)
pins: 1, 2
text: Цепь; Конт

## DS1021-1x4
designator X?, comment DS1021-1x4SF11  (value not drawn)
2,54 mm pin header single row  1x4; Case/Package: DIP-4; Mount: THT; Type: Вилка; Value: DS1021-1x4
footprint HDRV2W67P254_4x1_1016x250H250 (Header, Vertical, 2.54 mm pitch; 0.64 mm lead width, 4 pins, 1 row, 4 pins per row, 10.16 mm L X 2.50 mm W X 8.60 mm H body)
pins: 1, 2, 3, 4
text: Цепь; Конт

## DS1021-1x6
designator X?, comment DS1021-1x6SF11  (value not drawn)
2,54 mm pin header single row  1x6; Case/Package: DIP-6; Mount: THT; Type: Вилка; Value: DS1021-1x6
footprint HDRV6W64P254_6X1_1524X250H860 (Header, Vertical, 2.54 mm pitch; 0.64 mm lead width, 6 pins, 1 row, 6 pins per row, 15.24 mm L X 2.50 mm W X 8.60 mm H body)
pins: 1, 2, 3, 4, 5, 6
text: Цепь; Конт

## DS1021-1x10
designator X?, comment DS1021-1x10SF11  (value not drawn)
2,54 mm pin header single row  1x10; Case/Package: DIP-10; Mount: THT; Type: Вилка; Value: DS1021-1x10
footprint HDRV10W64P254_10X1_2540X250H860 (Header, Vertical, 2.54 mm pitch; 0.64 mm lead width, 6 pins, 1 row, 6 pins per row, 25.4 mm L X 2.50 mm W X 8.60 mm H body)
pins: 1, 2, 3, 4, 5, 6, 7, 8, 9, 10
text: Цепь; Конт

## DS1021-2x3
designator X?, comment DS1021-2x3SF11  (value not drawn)
2,54 mm pin header double row 2x3; Case/Package: DIP-6; Mount: THT; Type: Вилка; Value: DS1021-2x3
footprint HDRV6W64P254_3X2_762X500H860 (Header, Vertical, 2.54 mm pitch; 0.64 mm lead width, 6 pins, 2 rows, 3 pins per row, 7.62 mm L X 5.00 mm W X 8.60 mm H body)
footprint HDRV6W64P254_3X2_762X500H860 (REV) (Header, Vertical, 2.54 mm pitch; 0.64 mm lead width, 6 pins, 2 rows, 3 pins per row, 7.62 mm L X 5.00 mm W X 8.60 mm H body)
pins: 1, 2, 3, 4, 5, 6
text: Цепь; Конт

## DS1021-2x5
designator X?, comment DS1021-2x5SF11  (value not drawn)
2,54 mm pin header single row  2x5; Case/Package: DIP-10; Mount: THT; Type: Вилка; Value: DS1021-2x5
footprint HDRV10W64P254_5X2_1320X500H850 (Header, Vertical Receptacle, 2.54 mm pitch; 0.64 mm lead width, 10 pins, 2 row, 5 pins per row, 13.20 mm L X 5.00 mm W X 8.50 mm H body)
pins: 1, 2, 3, 4, 5, 6, 7, 8, 9, 10
text: Цепь; Конт

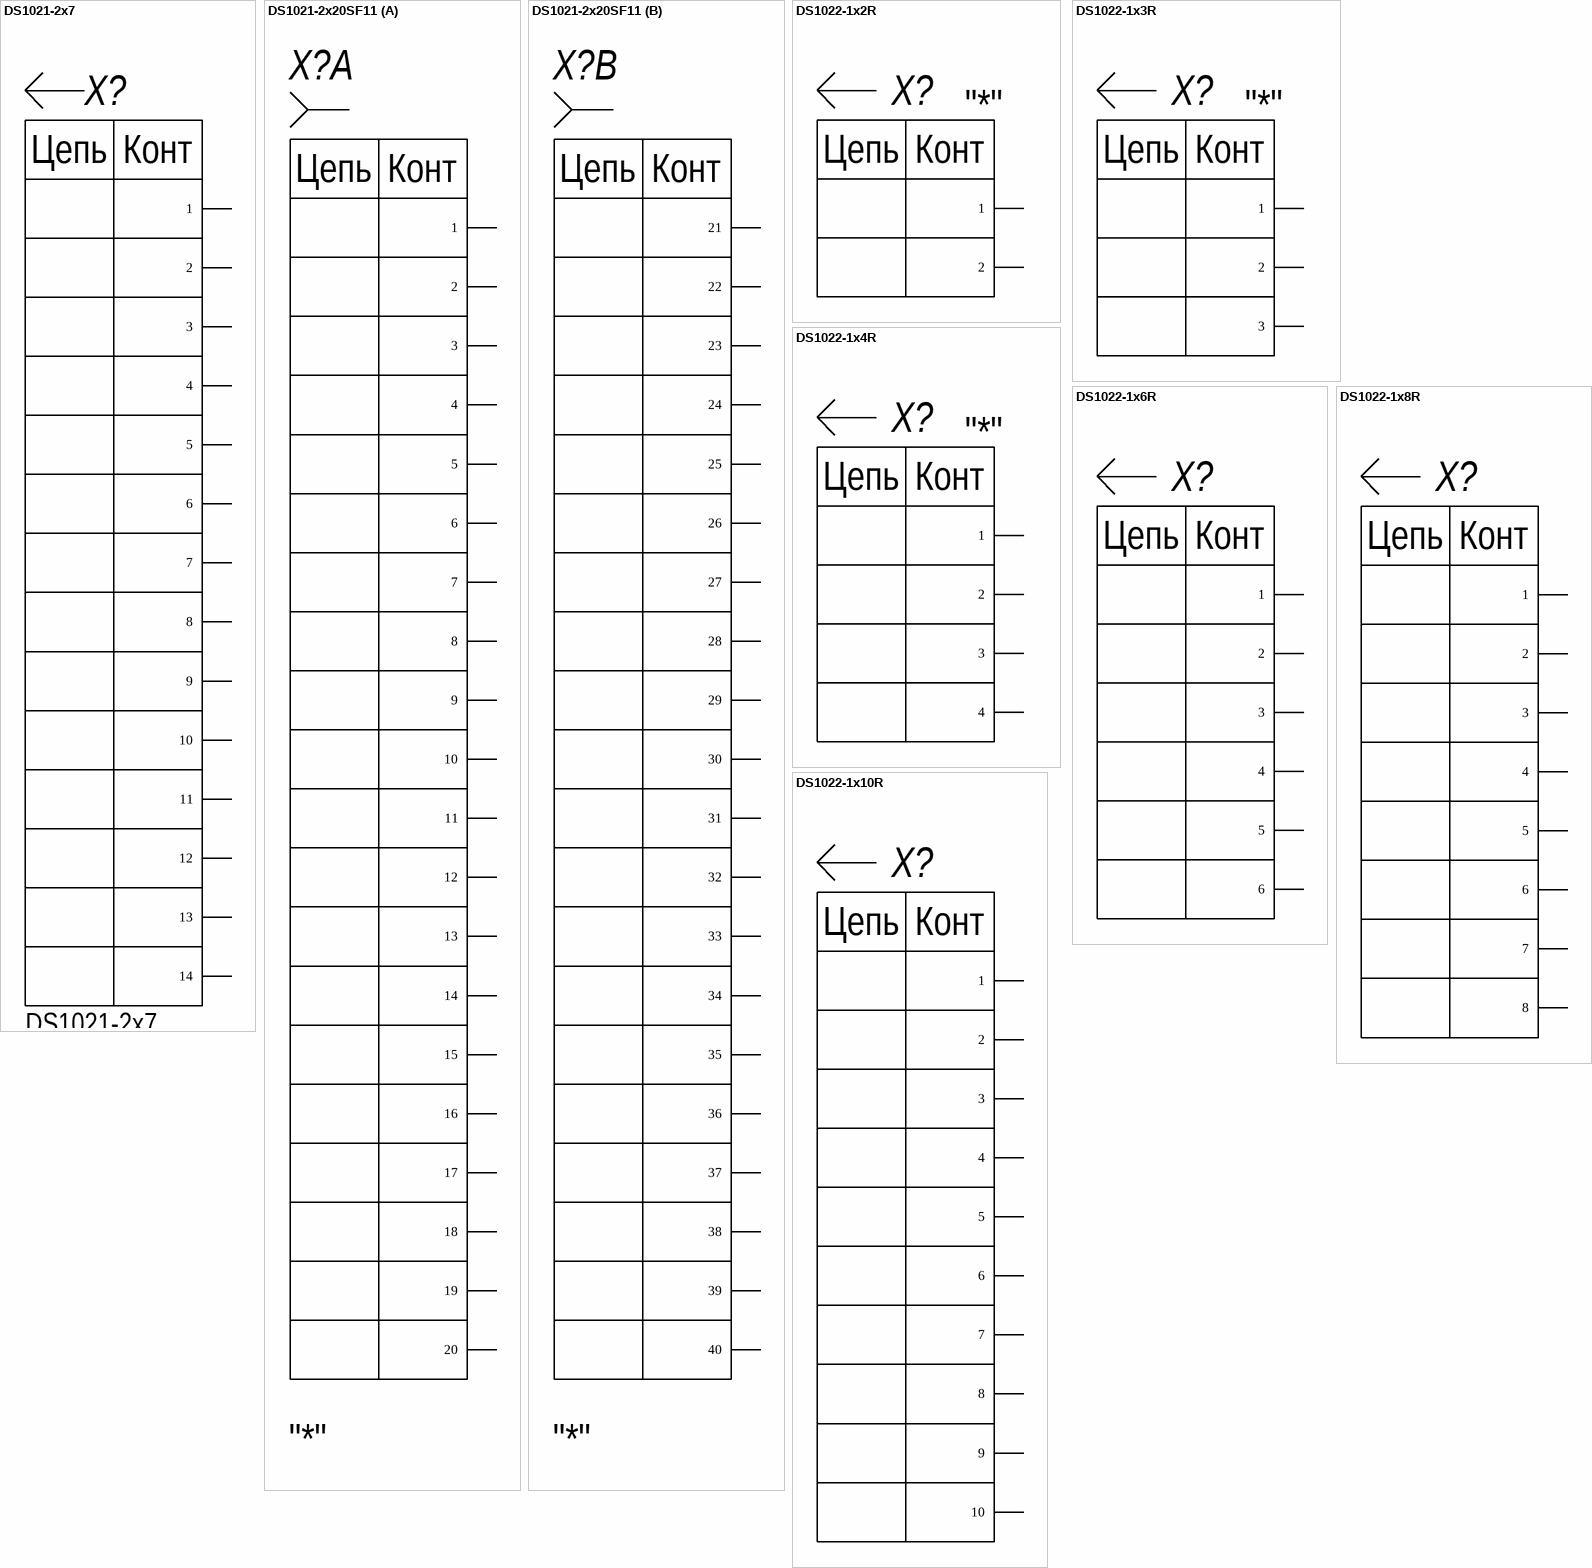
[diagram p9: symbols DS1021-2x7 to DS1022-1x10R]

## DS1021-2x7
designator X?, comment value DS1021-2x7  (hidden comment: DS1021-2x7SF11)
2,54 mm pin header single row  2x7; Case/Package: DIP-14; Mount: THT; Type: Вилка
footprint HDRV14W64P254_7X2_1774X500H850 (Header, Vertical Receptacle, 2.54 mm pitch; 0.64 mm lead width, 14 pins, 2 row, 7 pins per row, 17.74 mm L X 5.00 mm W X 8.50 mm H body)
pins: 1, 2, 3, 4, 5, 6, 7, 8, 9, 10, 11, 12, 13, 14
text: Цепь; Конт

## DS1021-2x20SF11
designator X?  Marck-2: "*"  (hidden comment: DS1021-2x20SF11)
2,54 Female Header 40 pin; Manufacturer 1: Ningbo Connfly Electric; Manufacturer Part Number 1: DS1023-1*40S21; ComponentLink1URL: https://datasheet.ciiva.com/30081/eng-cat-1307998-1-0705-074-30081833.pdf?src-supplier=Onlinecomponents.com; ComponentLink1Description: https://datasheet.ciiva.com/30081/eng-cat-1307998-1-0705-074-30081833.pdf?src-supplier=Onlinecomponents.com; RoHS: No; Pricing 1: 1=0,64000 (EUR); Marck-1: *; Case/Package: DIP-40; Mount: THT; Type: Вилка; Value: DS1021-2x20
footprint HDRV40W64P254_20X2_5130X500H850 (Header, Vertical Receptacle, 2.54 mm pitch; 0.64 mm lead width, 40 pins, 2 row, 20 pins per row, 51.30 mm L X 5.00 mm W X 8.50 mm H body)
part A pins: 1, 2, 3, 4, 5, 6, 7, 8, 9, 10, 11, 12, 13, 14, 15, 16, 17, 18, 19, 20
part B pins: 21, 22, 23, 24, 25, 26, 27, 28, 29, 30, 31, 32, 33, 34, 35, 36, 37, 38, 39, 40
part A text: Цепь; Конт
part B text: Цепь; Конт

## DS1022-1x2R
designator X?, comment Marck-2: "*"  (hidden comment: DS1022-1x3RU61)
2,54 mm pin header R/A type single row U type 1x2; Value: DS1022-1x2R; Marck-1: *; Case/Package: DIP-2; Mount: THT; Type: Вилка
footprint HDRRA6W67P254_2X1_508X250H250 (Header, Right Angle Post, 2.54 mm pitch; 0.67 mm lead width, 2 pins, 1 row, 2 pins per row, 5.08 mm L X 2.50 mm W X 2.50 mm H body)
footprint HDRRA6W67P254_2X1_508X250H250 (REV) (Header, Right Angle Post, 2.54 mm pitch; 0.67 mm lead width,2 pins, 1 row, 2 pins per row, 5.08 mm L X 2.50 mm W X 2.50 mm H body)
pins: 1, 2
text: Цепь; Конт

## DS1022-1x3R
designator X?, comment Marck-2: "*"  (hidden comment: DS1022-1x3RU61)
2,54 mm pin header R/A type single row U type 1x3; Marck-1: *; Case/Package: DIP-3; Mount: THT; Type: Вилка; Value: DS1022-1x3R
footprint HDRRA6W67P254_3X1_1524X250H250 (Header, Right Angle Post, 2.54 mm pitch; 0.67 mm lead width, 6 pins, 1 row, 6 pins per row, 7.62 mm L X 2.50 mm W X 2.50 mm H body)
footprint HDRRA6W67P254_3X1_1524X250H250 (REV) (Header, Right Angle Post, 2.54 mm pitch; 0.67 mm lead width, 6 pins, 1 row, 6 pins per row, 7.62 mm L X 2.50 mm W X 2.50 mm H body)
pins: 1, 2, 3
text: Цепь; Конт

## DS1022-1x4R
designator X?, comment Marck-2: "*"  (hidden comment: DS1022-1x4RU61)
2,54 mm pin header R/A type single row U type 1x4; Marck-1: *; Case/Package: DIP-4; Mount: THT; Type: Вилка; Value: DS1022-1x4R
footprint HDRRA6W67P254_4X1_1013X250H250 (Header, Right Angle Post, 2.54 mm pitch; 0.67 mm lead width, 4 pins, 1 row, 4 pins per row, 10.13 mm L X 2.50 mm W X 2.50 mm H body)
footprint HDRRA6W67P254_4X1_1013X250H250(REV) (Header, Right Angle Post, 2.54 mm pitch; 0.67 mm lead width, 4 pins, 1 row, 4 pins per row, 10.13 mm L X 2.50 mm W X 2.50 mm H body)
pins: 1, 2, 3, 4
text: Цепь; Конт

## DS1022-1x6R
designator X?, comment DS1022-1x6RU61  (value not drawn)
2,54 mm pin header R/A type single row U type 1x6; Marck-1: *; Marck-2: *; Case/Package: DIP-6; Mount: THT; Type: Вилка; Value: DS1022-1x6R
footprint HDRRA6W67P254_6X1_1524X250H250 (Header, Right Angle Post, 2.54 mm pitch; 0.67 mm lead width, 6 pins, 1 row, 6 pins per row, 15.24 mm L X 2.50 mm W X 2.50 mm H body)
footprint HDRRA6W67P254_6X1_1524X250H250(REV) (Header, Right Angle Post, 2.54 mm pitch; 0.67 mm lead width, 6 pins, 1 row, 6 pins per row, 15.24 mm L X 2.50 mm W X 2.50 mm H body)
pins: 1, 2, 3, 4, 5, 6
text: Цепь; Конт

## DS1022-1x8R
designator X?, comment DS1022-1x8RU61  (value not drawn)
2,54 mm pin header R/A type single row U type 1x8; Marck-1: *; Marck-2: *; Case/Package: DIP-8; Mount: THT; Type: Вилка; Value: DS1022-1x8R
footprint HDRRA8W67P254_8X1_2032X250H250(REV) (Header, Right Angle Post, 2.54 mm pitch; 0.67 mm lead width, 10 pins, 1 row, 10 pins per row, 20.32mm L X 2.50 mm W X 2.50 mm H body)
footprint HDRRA8W67P254_8X1_2032X250H250 (Header, Right Angle Post, 2.54 mm pitch; 0.67 mm lead width, 10 pins, 1 row, 10 pins per row, 20.32mm L X 2.50 mm W X 2.50 mm H body)
pins: 1, 2, 3, 4, 5, 6, 7, 8
text: Цепь; Конт

## DS1022-1x10R
designator X?, comment DS1022-1x10RU61  (value not drawn)
2,54 mm pin header R/A type single row U type 1x10; Marck-1: *; Marck-2: *; Case/Package: DIP-10; Mount: THT; Type: Вилка; Value: DS1022-1x10R
footprint HDRRA10W67P254_10X1_2540X250H250 (Header, Right Angle Post, 2.54 mm pitch; 0.67 mm lead width, 10 pins, 1 row, 10 pins per row, 25.4 mm L X 2.50 mm W X 2.50 mm H body)
footprint HDRRA10W67P254_10X1_2540X250H250 (REV) (Header, Right Angle Post, 2.54 mm pitch; 0.67 mm lead width, 10 pins, 1 row, 10 pins per row, 25.4 mm L X 2.50 mm W X 2.50 mm H body)
pins: 1, 2, 3, 4, 5, 6, 7, 8, 9, 10
text: Цепь; Конт

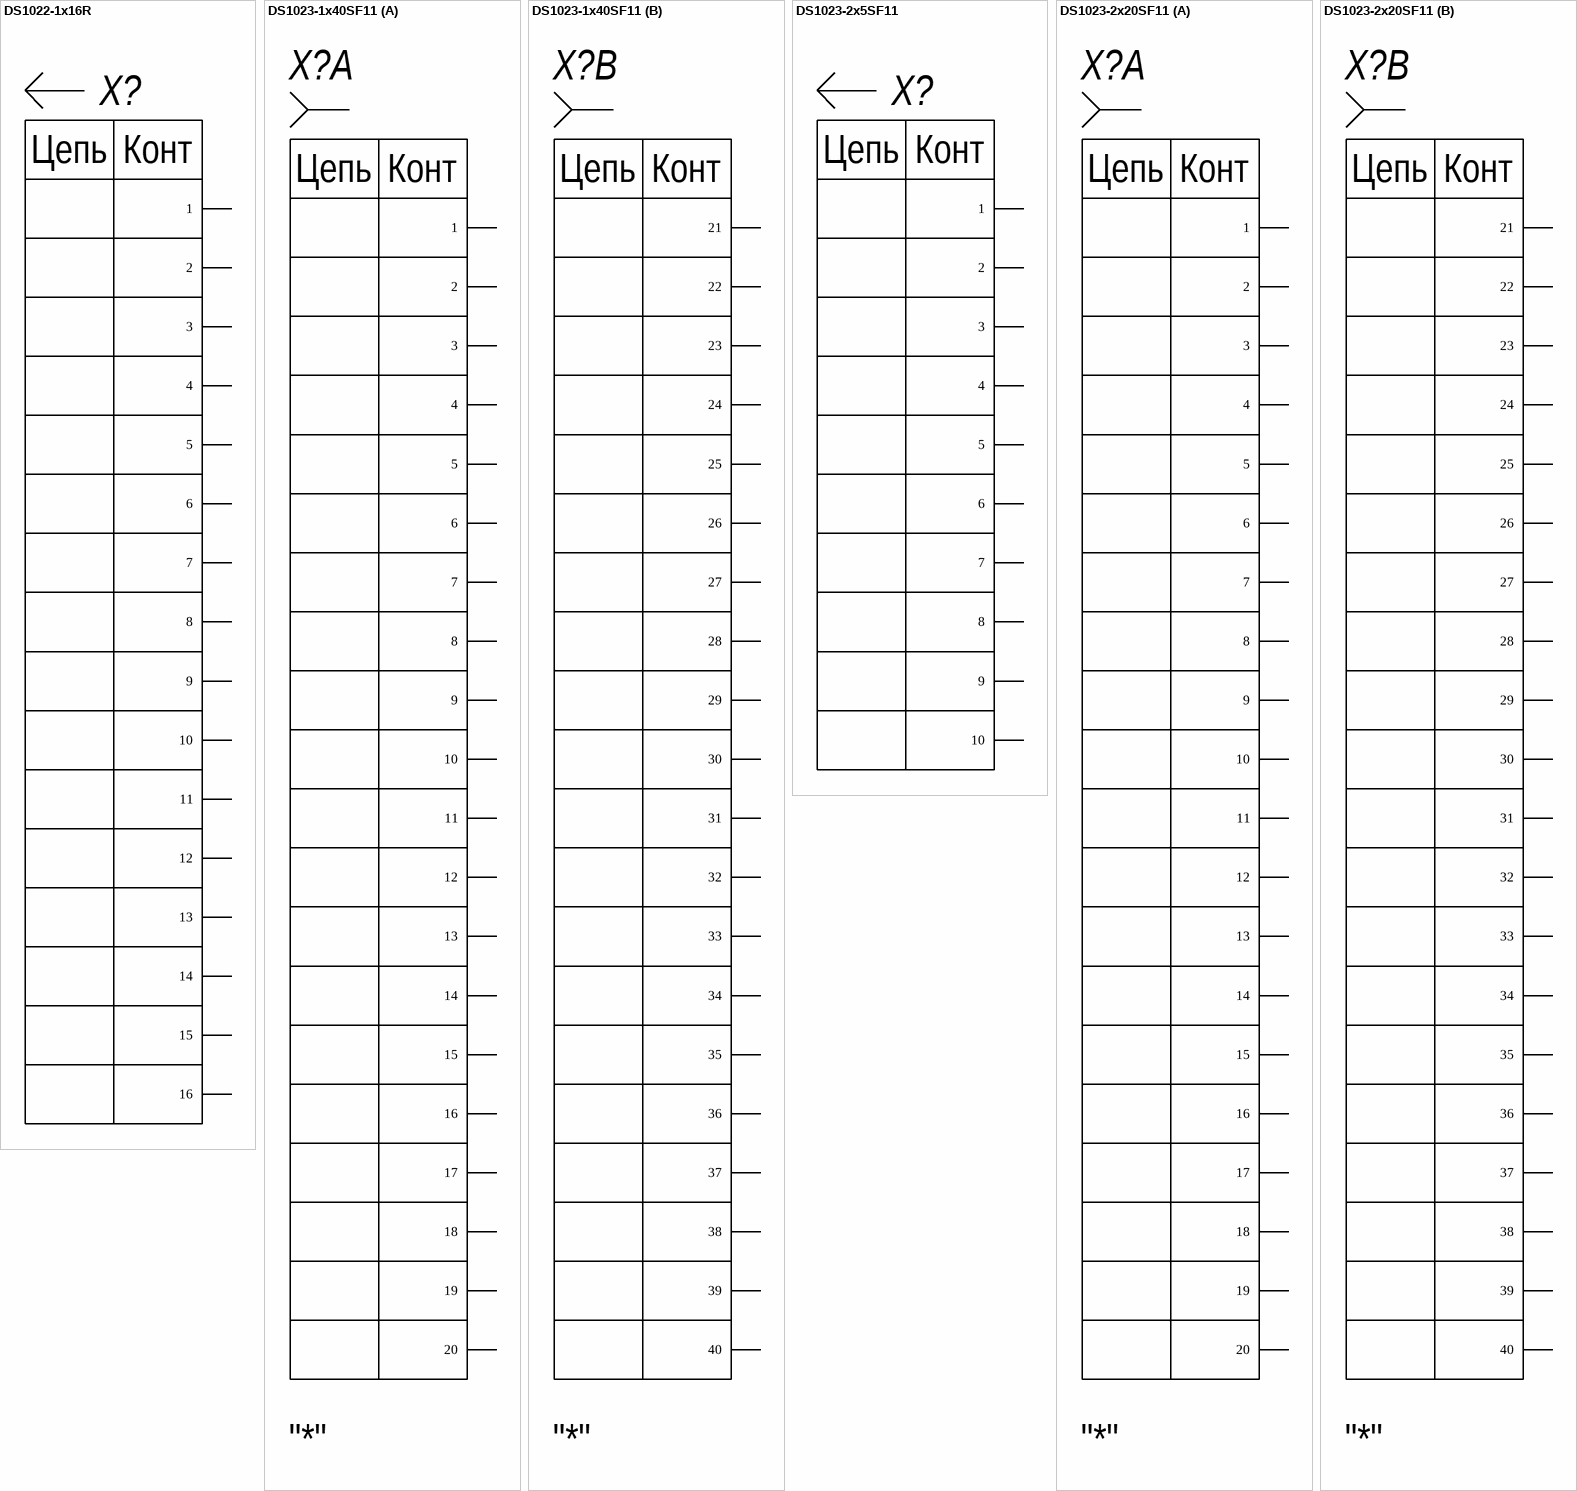
[diagram p10: symbols DS1022-1x16R to DS1023-2x20SF11]

## DS1022-1x16R
designator X?, comment DS1022-1x16RU61  (value not drawn)
2,54 mm pin header R/A type single row U type 1x16; Marck-1: *; Marck-2: *; Case/Package: DIP-16; Mount: THT; Type: Вилка; Value: DS1022-1x16R
footprint HDRRA16W67P254_16X1_4064X250H250 (Header, Right Angle Post, 2.54 mm pitch; 0.67 mm lead width, 16 pins, 1 row, 16 pins per row, 40.64 mm L X 2.50 mm W X 2.50 mm H body)
pins: 1, 2, 3, 4, 5, 6, 7, 8, 9, 10, 11, 12, 13, 14, 15, 16
text: Цепь; Конт

## DS1023-1x40SF11
designator X?  Marck-2: "*"  (hidden comment: DS1023-1x40SF11)
2,54 Female Header 40 pin; Manufacturer 1: Ningbo Connfly Electric; Manufacturer Part Number 1: DS1023-1*40S21; ComponentLink1URL: https://datasheet.ciiva.com/30081/eng-cat-1307998-1-0705-074-30081833.pdf?src-supplier=Onlinecomponents.com; ComponentLink1Description: https://datasheet.ciiva.com/30081/eng-cat-1307998-1-0705-074-30081833.pdf?src-supplier=Onlinecomponents.com; Supplier 1: Conrad; Supplier Part Number 1: 1498266; RoHS: No; Pricing 1: 1=0,64000 (EUR); Marck-1: *; Case/Package: DIP-40; Mount: THT; Type: Розетка; Value: DS1023-1x40
footprint RHDRV40W60P254_40X1_10210X250H850 (Header, Vertical Receptacle, 2.54 mm pitch; 0.60 mm lead width, 40 pins, 1 row, 40 pins per row, 102.10 mm L X 2.50 mm W X 8.50 mm H body)
part A pins: 1, 2, 3, 4, 5, 6, 7, 8, 9, 10, 11, 12, 13, 14, 15, 16, 17, 18, 19, 20
part B pins: 21, 22, 23, 24, 25, 26, 27, 28, 29, 30, 31, 32, 33, 34, 35, 36, 37, 38, 39, 40
part A text: Цепь; Конт
part B text: Цепь; Конт

## DS1023-2x5SF11
designator X?  (value not drawn)
2,54 Female Header 10 pin; Marck-1: *; Marck-2: *; Case/Package: DIP-10; Mount: THT; Type: Розетка; Value: DS1023-2x5
footprint RHDRV10W64P254_5X2_1320X500H850 (Header, Vertical Receptacle, 2.54 mm pitch; 0.64 mm lead width, 10 pins, 2 row, 5 pins per row, 13.20 mm L X 5.00 mm W X 8.50 mm H body)
pins: 1, 2, 3, 4, 5, 6, 7, 8, 9, 10
text: Цепь; Конт

## DS1023-2x20SF11
designator X?  Marck-2: "*"  (hidden comment: DS1023-2x20SF11)
2,54 Female Header 40 pin; Manufacturer 1: Ningbo Connfly Electric; Manufacturer Part Number 1: DS1023-1*40S21; Value: DS1023-2x40; ComponentLink1URL: https://datasheet.ciiva.com/30081/eng-cat-1307998-1-0705-074-30081833.pdf?src-supplier=Onlinecomponents.com; ComponentLink1Description: https://datasheet.ciiva.com/30081/eng-cat-1307998-1-0705-074-30081833.pdf?src-supplier=Onlinecomponents.com; RoHS: No; Pricing 1: 1=0,64000 (EUR); Marck-1: *; Case/Package: DIP-80; Mount: THT; Type: Розетка
footprint RHDRV40W64P254_20X2_5130X500H850 (Header, Vertical Receptacle, 2.54 mm pitch; 0.64 mm lead width, 40 pins, 2 row, 20 pins per row, 51.30 mm L X 5.00 mm W X 8.50 mm H body)
part A pins: 1, 2, 3, 4, 5, 6, 7, 8, 9, 10, 11, 12, 13, 14, 15, 16, 17, 18, 19, 20
part B pins: 21, 22, 23, 24, 25, 26, 27, 28, 29, 30, 31, 32, 33, 34, 35, 36, 37, 38, 39, 40
part A text: Цепь; Конт
part B text: Цепь; Конт

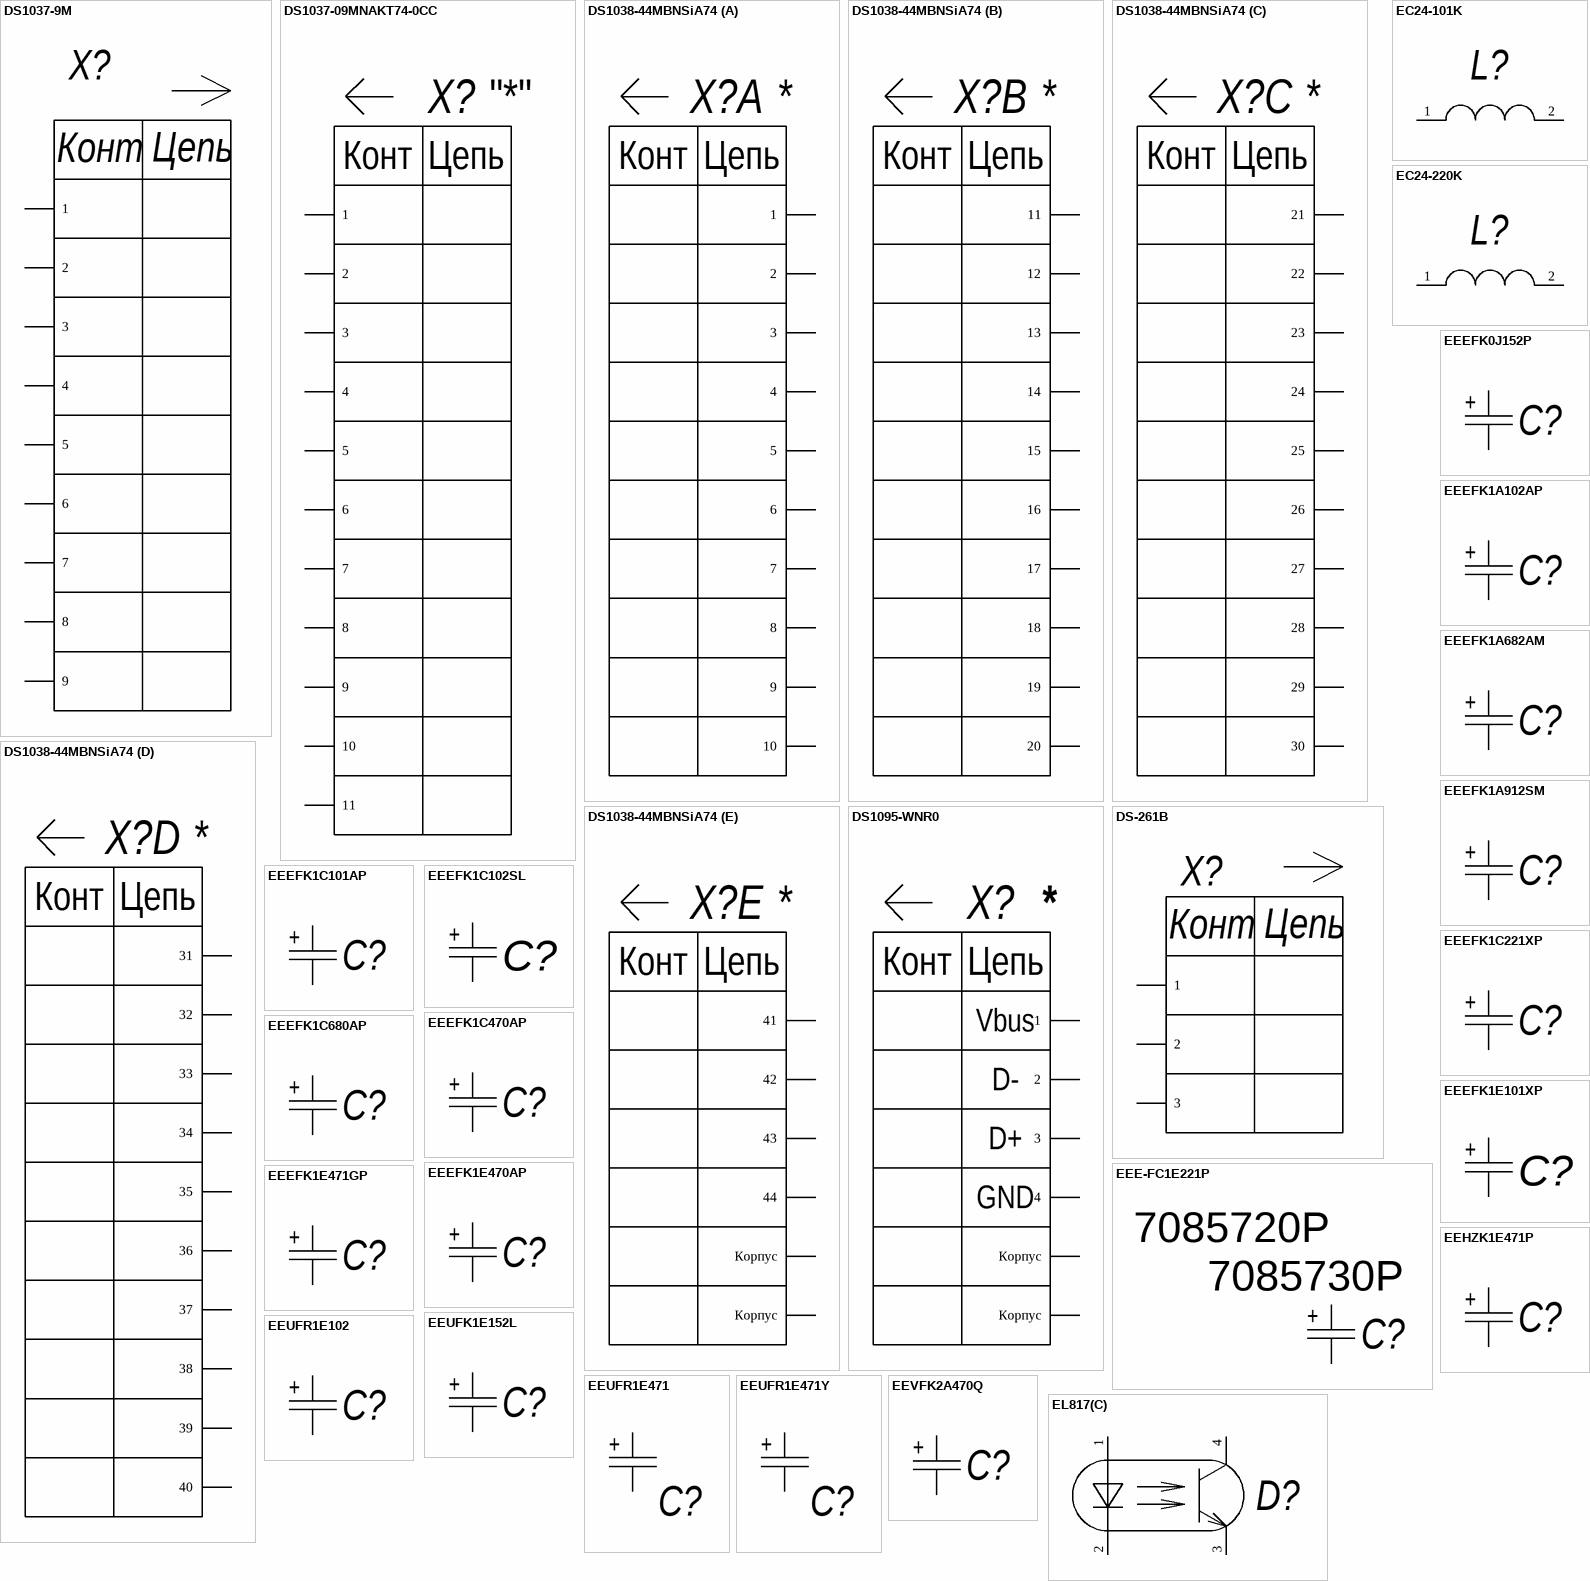
[diagram p11: symbols DS1037-9M to EL817(C)]

## DS1037-9M
designator X?  (value not drawn)
Вилка 9 pin на плату 7.2мм; Case/Package: DIP-9; Mount: THT; Type: 0; Value: DS1037-9M
pins: 1 "Назначение вывода", 2 "Назначение вывода", 3 "Назначение вывода", 4 "Назначение вывода", 5 "Назначение вывода", 6 "Назначение вывода", 7 "Назначение вывода", 8 "Назначение вывода", 9 "Назначение вывода"
text: Конт; Цепь

## DS1037-09MNAKT74-0CC
designator X?, comment MARCK_2: "*"  (hidden comment: DS1037-09)
Вилка 9 pin на плату 7.2мм; Value: DS1037-09M; MARCK_1: *; Case/Package: PIN-9; Mount: THT; Type: Вилка
footprint CONNFLY_DS1037-09M
pins: 1 "Назначение вывода", 2 "Назначение вывода", 3 "Назначение вывода", 4 "Назначение вывода", 5 "Назначение вывода", 6 "Назначение вывода", 7 "Назначение вывода", 8 "Назначение вывода", 9 "Назначение вывода", MH1 10 "Назначение вывода", MH2 11 "Назначение вывода"
text: Конт; Цепь

## DS1038-44MBNSiA74
designator X?, comment DS1038-44M  (value not drawn)
MARCK_1: *; Case/Package: PIN-44; Mount: THT; Type: Вилка; Value: DS1038-44M; MARCK_2: *
footprint CONNFLY_DS1038-44M
part A pins: 1, 2, 3, 4, 5, 6, 7, 8, 9, 10
part B pins: 11, 12, 13, 14, 15, 16, 17, 18, 19, 20
part C pins: 21, 22, 23, 24, 25, 26, 27, 28, 29, 30
part D pins: 31, 32, 33, 34, 35, 36, 37, 38, 39, 40
part E pins: 41, 42, 43, 44, MH1 Корпус, MH2 Корпус
part A text: Конт; Цепь
part B text: Конт; Цепь
part C text: Конт; Цепь
part D text: Конт; Цепь
part E text: Конт; Цепь

## DS1095-WNR0
designator X?  (value not drawn)
Value: DS1095; MARCK_1: *; Case/Package: DIP-4 (+MECH-2); Mount: THT; Type: Розетка; MARCK_2: *
footprint DS1095
pins: 1, 2, 3, 4, MH1 Корпус, MH2 Корпус
text: Конт; Цепь; Vbus; D-; D+; GND

## DS-261B
designator X?  (value not drawn)
Гнездо питания на плату, 2.5х6,4мм, 16V/1.5A; Case/Package: DIP-3; Mount: THT; Type: Розетка; Value: DS-261B
footprint DS-261
pins: 1 "Назначение вывода", 2 "Назначение вывода", 3 "Назначение вывода"
text: Конт; Цепь

## EC24-101K
designator L?  (value not drawn)
Epoxy Coated Coils EC24 Series 100 uH 185 mA; Type: Катушка индуктивности; Value: 100uH; Case/Package: DIP-2; Mount: THT
footprint INDAD1250W50L700D280 (Inductor, Axial; 12.50 mm C X 0.50 mm W 7.00 mm L X 2.80 mm Dia body)
pins: 1 "Назначение вывода", 2 "Назначение вывода"

## EC24-220K
designator L?  (value not drawn)
Epoxy Coated Coils EC24 Series 220 uH 185 mA; Type: Катушка индуктивности; Value: 22uH; Case/Package: DIP-2; Mount: THT
footprint INDAD1250W50L700D280 (Inductor, Axial; 12.50 mm C X 0.50 mm W 7.00 mm L X 2.80 mm Dia body)
pins: 1 "Назначение вывода", 2 "Назначение вывода"

## EEE-FC1E221P
designator C?  Supplier Part Number 2: 7085730P  Supplier Part Number 3: 7085720P  (hidden comment: EEE-FC1E221P)
Cap Aluminum 1000uF 10V 20% (10 X 10.2mm) SMD 670mA 1000 hr 105°C Embossed T/R; Manufacturer 1: Panasonic; Manufacturer Part Number 1: EEVFK2A470Q; Dielectric Material: Aluminium; Capacitance: 47uF; Voltage Rating: 100V; Ripple Current: 500mA; Impedance: 320mR; Life (Hours): 5000Hour; Leakage Current: 3uA; Polarity: Polar; Lead Diameter: 0.9mm; Value: 1mX10V; Type: Конденсатор электролитический; Manufacturer 2: Panasonic; Manufacturer Part Number 2: EEE-FC1E221P; RoHS: Yes; Category: Aluminum Electrolytic Capacitors; Stock 2: 1; Pricing 2: 10=0,65200, 50=0,62000, 150=0,43900, 300=0,41700 (USD); Mount: SMT; Case/Package: 10x10,2 (SMD-2); Number of Pins: 2; Contact Plating: Tin; Min Operating Temperature: -55°C; Max Operating Temperature: 105°C; Tolerance: 20%; Packaging: Tape and Reel; Package Quantity: 1; Ripple Current (AC): 500mA; Voltage Rating (DC): 100V; ESR (Equivalent Series Resistance): 320mR; Termination: SMD/SMT; Voltage: 100V; Series: FK; Construction: Cylindrical; Diameter: 12.5mm; Length: 14mm; Width: 900um; Height: 13.5mm; Height - Seated (Max): 0.531inch; Radiation Hardening: No; REACH SVHC: No SVHC; Lead Free: Lead Free; RoHS Compliant: Yes; ComponentLink1URL: https://datasheet.ciiva.com/11778/0900766b806bc526-11778295.pdf?src-supplier=RSComponents; ComponentLink1Description: https://datasheet.ciiva.com/11778/0900766b806bc526-11778295.pdf?src-supplier=RSComponents; ComponentLink2URL: https://datasheet.ciiva.com/14608/70258115-14608637.pdf?src-supplier=Allied+Electronics; ComponentLink2Description: https://datasheet.ciiva.com/14608/70258115-14608637.pdf?src-supplier=Allied+Electronics; ComponentLink3URL: https://datasheet.ciiva.com/14598/70258115-14598518.pdf?src-supplier=Allied+Electronics; ComponentLink3Description: https://datasheet.ciiva.com/14598/70258115-14598518.pdf?src-supplier=Allied+Electronics; ComponentLink4URL: https://datasheet.ciiva.com/43485/1676921-43485533.pdf?src-supplier=Farnell; ComponentLink4Description: https://datasheet.ciiva.com/43485/1676921-43485533.pdf?src-supplier=Farnell; ComponentLink5URL: https://datasheet.ciiva.com/5950/1676921-5950013.pdf?src-supplier=Farnell; ComponentLink5Description: https://datasheet.ciiva.com/5950/1676921-5950013.pdf?src-supplier=Farnell; ComponentLink6URL: https://datasheet.ciiva.com/36855/1676921-36855237.pdf?src-supplier=Element14; ComponentLink6Description: https://datasheet.ciiva.com/36855/1676921-36855237.pdf?src-supplier=Element14; ComponentLink7URL: https://datasheet.ciiva.com/2984/aba0000ce120-2984092.pdf?src-supplier=Avnet; ComponentLink7Description: https://datasheet.ciiva.com/2984/aba0000ce120-2984092.pdf?src-supplier=Avnet; ComponentLink8URL: https://datasheet.ciiva.com/16205/aba0000ce120-16205373.pdf?src-supplier=Future+Electronics; ComponentLink8Description: https://datasheet.ciiva.com/16205/aba0000ce120-16205373.pdf?src-supplier=Future+Electronics; ComponentLink9URL: https://datasheet.ciiva.com/11178/aba0000ce120-11178232.pdf?src-supplier=Avnet; ComponentLink9Description: https://datasheet.ciiva.com/11178/aba0000ce120-11178232.pdf?src-supplier=Avnet; ComponentLink10URL: https://datasheet.ciiva.com/30223/eev-fkseries-30223615.pdf?src-supplier=Onlinecomponents.com; ComponentLink10Description: https://datasheet.ciiva.com/30223/eev-fkseries-30223615.pdf?src-supplier=Onlinecomponents.com; ComponentLink11URL: https://datasheet.ciiva.com/17534/aba0000ce120-17534298.pdf?src-supplier=Avnet+Europe; ComponentLink11Description: https://datasheet.ciiva.com/17534/aba0000ce120-17534298.pdf?src-supplier=Avnet+Europe; Supplier 1: Digi-Key; Stock 1: 406; Pricing 1: 1=1,32000, 10=1,03800, 50=0,90000, 100=0,77880 (USD); Supplier 2: RSComponents; Lead Pitch: 4.6mm; Size: 10.2mm; ComponentLink12URL: https://datasheet.ciiva.com/25613/0900766b80e4a876-25613443.pdf?src-supplier=RSComponents; ComponentLink12Description: https://datasheet.ciiva.com/25613/0900766b80e4a876-25613443.pdf?src-supplier=RSComponents; ComponentLink13URL: https://datasheet.ciiva.com/11777/0900766b80e4a876-11777312.pdf?src-supplier=RSComponents; ComponentLink13Description: https://datasheet.ciiva.com/11777/0900766b80e4a876-11777312.pdf?src-supplier=RSComponents; ComponentLink14URL: https://datasheet.ciiva.com/19479/1984110-19479275.pdf?src-supplier=Jameco; ComponentLink14Description: https://datasheet.ciiva.com/19479/1984110-19479275.pdf?src-supplier=Jameco; ComponentLink15URL: https://datasheet.ciiva.com/10331/aba0000ce5-10331022.pdf?src-supplier=Avnet; ComponentLink15Description: https://datasheet.ciiva.com/10331/aba0000ce5-10331022.pdf?src-supplier=Avnet; ComponentLink16URL: https://datasheet.ciiva.com/16432/aba0000ce5-16432894.pdf?src-supplier=Future+Electronics; ComponentLink16Description: https://datasheet.ciiva.com/16432/aba0000ce5-16432894.pdf?src-supplier=Future+Electronics; ComponentLink17URL: https://datasheet.ciiva.com/30229/aba0000ce5-30229535.pdf?src-supplier=Onlinecomponents.com; ComponentLink17Description: https://datasheet.ciiva.com/30229/aba0000ce5-30229535.pdf?src-supplier=Onlinecomponents.com; ComponentLink18URL: https://datasheet.ciiva.com/48542/eeefc-series-eng-tds-48542719.pdf?src-supplier=Distrelec; ComponentLink18Description: https://datasheet.ciiva.com/48542/eeefc-series-eng-tds-48542719.pdf?src-supplier=Distrelec; ComponentLink19URL: https://datasheet.ciiva.com/46375/31718-46375015.pdf?src-supplier=Element14; ComponentLink19Description: https://datasheet.ciiva.com/46375/31718-46375015.pdf?src-supplier=Element14; ComponentLink20URL: https://datasheet.ciiva.com/46387/31718-46387342.pdf?src-supplier=Element14; ComponentLink20Description: https://datasheet.ciiva.com/46387/31718-46387342.pdf?src-supplier=Element14; Supplier 3: RSComponents; Manufacturer 3: Panasonic; Manufacturer Part Number 3: EEE-FC1A102P; Stock 3: 1; Pricing 3: 10=0,54200, 50=0,46000, 100=0,40700, 250=0,35300, 1000=0,32500 (USD); Material: Aluminium; ComponentLink21URL: https://datasheet.ciiva.com/25613/0900766b80e4a876-25613488.pdf?src-supplier=RSComponents; ComponentLink21Description: https://datasheet.ciiva.com/25613/0900766b80e4a876-25613488.pdf?src-supplier=RSComponents; ComponentLink22URL: https://datasheet.ciiva.com/11777/0900766b80e4a876-11777284.pdf?src-supplier=RSComponents; ComponentLink22Description: https://datasheet.ciiva.com/11777/0900766b80e4a876-11777284.pdf?src-supplier=RSComponents; ComponentLink23URL: https://datasheet.ciiva.com/48542/eeefc-series-eng-tds-48542827.pdf?src-supplier=Distrelec; ComponentLink23Description: https://datasheet.ciiva.com/48542/eeefc-series-eng-tds-48542827.pdf?src-supplier=Distrelec; ComponentLink24URL: https://datasheet.ciiva.com/43463/31718-43463422.pdf?src-supplier=Farnell; ComponentLink24Description: https://datasheet.ciiva.com/43463/31718-43463422.pdf?src-supplier=Farnell; ComponentLink25URL: https://datasheet.ciiva.com/46375/31718-46375017.pdf?src-supplier=Element14; ComponentLink25Description: https://datasheet.ciiva.com/46375/31718-46375017.pdf?src-supplier=Element14; ComponentLink26URL: https://datasheet.ciiva.com/43463/31718-43463448.pdf?src-supplier=Farnell; ComponentLink26Description: https://datasheet.ciiva.com/43463/31718-43463448.pdf?src-supplier=Farnell; ComponentLink27URL: https://datasheet.ciiva.com/46387/31718-46387340.pdf?src-supplier=Element14; ComponentLink27Description: https://datasheet.ciiva.com/46387/31718-46387340.pdf?src-supplier=Element14; ComponentLink28URL: https://datasheet.ciiva.com/14608/70068018-14608857.pdf?src-supplier=Allied+Electronics; ComponentLink28Description: https://datasheet.ciiva.com/14608/70068018-14608857.pdf?src-supplier=Allied+Electronics; ComponentLink29URL: https://datasheet.ciiva.com/14602/70256381-14602508.pdf?src-supplier=Allied+Electronics; ComponentLink29Description: https://datasheet.ciiva.com/14602/70256381-14602508.pdf?src-supplier=Allied+Electronics; ComponentLink30URL: https://datasheet.ciiva.com/14601/70256381-14601631.pdf?src-supplier=Allied+Electronics; ComponentLink30Description: https://datasheet.ciiva.com/14601/70256381-14601631.pdf?src-supplier=Allied+Electronics; ComponentLink31URL: https://datasheet.ciiva.com/2985/aba0000ce5-2985268.pdf?src-supplier=Avnet; ComponentLink31Description: https://datasheet.ciiva.com/2985/aba0000ce5-2985268.pdf?src-supplier=Avnet; ComponentLink32URL: https://datasheet.ciiva.com/30252/aba0000ce5-30252662.pdf?src-supplier=Onlinecomponents.com; ComponentLink32Description: https://datasheet.ciiva.com/30252/aba0000ce5-30252662.pdf?src-supplier=Onlinecomponents.com; Case Code (Metric): 10x10.2
footprint CAPAE1030X1050L320X90N (Capacitor, Aluminum Electrolytic; 10.30 mm L X 10.30 mm W X 10.50 mm H body)
pins: 1, 2
text: +

## EEEFK0J152P
designator C?  (value not drawn)
Aluminium capacitor 10x10.2 1500 µF 6,3 V; Capacitance: 1.5mF; Ripple Current: 850mA; Tolerance: 20%; Voltage Rating: 6.3V; Impedance: 80mR; Polarity: Polar; Life (Hours): 2000Hour; Leakage Current: 3uA; Value: 1.5mX6.3V; Type: Конденсатор электролитический; Supplier 1: Avnet; Supplier Part Number 1: EEE-FK1E471GP; Supplier 2: Digi-Key; Manufacturer 2: Panasonic; Manufacturer Part Number 2: EEE-FK0J152P; RoHS: Yes; Category: Aluminum Electrolytic Capacitors; Pricing 2: 1=0,89000, 10=0,67900, 50=0,56380, 100=0,48560 (USD); Mount: SMT; Case/Package: 10x10,2 (SMD-2); Number of Pins: 2; Contact Plating: Tin; Min Operating Temperature: -55°C; Max Operating Temperature: 105°C; Ripple Current (AC): 850mA; Packaging: Tape and Reel; Package Quantity: 500; Voltage Rating (DC): 6.3V; ESR (Equivalent Series Resistance): 80mR; Termination: SMD/SMT; Voltage: 6.3V; Series: FK; Construction: Cylindrical; Diameter: 10mm; Length: 10.2mm; Width: 12mm; Height: 10.2mm; Height - Seated (Max): 0.413inch; Radiation Hardening: No; REACH SVHC: No SVHC; Lead Free: Lead Free; RoHS Compliant: Yes; ComponentLink1URL: https://datasheet.ciiva.com/27056/2012267-27056182.pdf?src-supplier=Jameco; ComponentLink1Description: https://datasheet.ciiva.com/27056/2012267-27056182.pdf?src-supplier=Jameco; ComponentLink2URL: https://datasheet.ciiva.com/11778/0900766b80e4e8b0-11778200.pdf?src-supplier=RSComponents; ComponentLink2Description: https://datasheet.ciiva.com/11778/0900766b80e4e8b0-11778200.pdf?src-supplier=RSComponents; ComponentLink3URL: https://datasheet.ciiva.com/6059/1676921-6059982.pdf?src-supplier=Farnell; ComponentLink3Description: https://datasheet.ciiva.com/6059/1676921-6059982.pdf?src-supplier=Farnell; ComponentLink4URL: https://datasheet.ciiva.com/46376/1676921-46376440.pdf?src-supplier=Element14; ComponentLink4Description: https://datasheet.ciiva.com/46376/1676921-46376440.pdf?src-supplier=Element14; ComponentLink5URL: https://datasheet.ciiva.com/28694/731857-28694637.pdf?src-supplier=Element14; ComponentLink5Description: https://datasheet.ciiva.com/28694/731857-28694637.pdf?src-supplier=Element14; ComponentLink6URL: https://datasheet.ciiva.com/14605/70258115-14605343.pdf?src-supplier=Allied+Electronics; ComponentLink6Description: https://datasheet.ciiva.com/14605/70258115-14605343.pdf?src-supplier=Allied+Electronics; ComponentLink7URL: https://datasheet.ciiva.com/14605/70258115-14605742.pdf?src-supplier=Allied+Electronics; ComponentLink7Description: https://datasheet.ciiva.com/14605/70258115-14605742.pdf?src-supplier=Allied+Electronics; ComponentLink8URL: https://datasheet.ciiva.com/11679/aba0000ce120-11679306.pdf?src-supplier=Avnet; ComponentLink8Description: https://datasheet.ciiva.com/11679/aba0000ce120-11679306.pdf?src-supplier=Avnet; ComponentLink9URL: https://datasheet.ciiva.com/30101/aba0000ce120-30101494.pdf?src-supplier=Onlinecomponents.com; ComponentLink9Description: https://datasheet.ciiva.com/30101/aba0000ce120-30101494.pdf?src-supplier=Onlinecomponents.com; ComponentLink10URL: https://datasheet.ciiva.com/17533/aba0000ce120-17533610.pdf?src-supplier=Avnet+Europe; ComponentLink10Description: https://datasheet.ciiva.com/17533/aba0000ce120-17533610.pdf?src-supplier=Avnet+Europe; Case Code (Metric): 10x10.2
footprint CAPAE1030X1050L320X90N (Capacitor, Aluminum Electrolytic; 10.30 mm L X 10.30 mm W X 10.50 mm H body)
pins: 1, 2
text: +